# Altium schematic symbol library IntegratedCircuit.SchLib: 131 symbols (part 2 of 3)
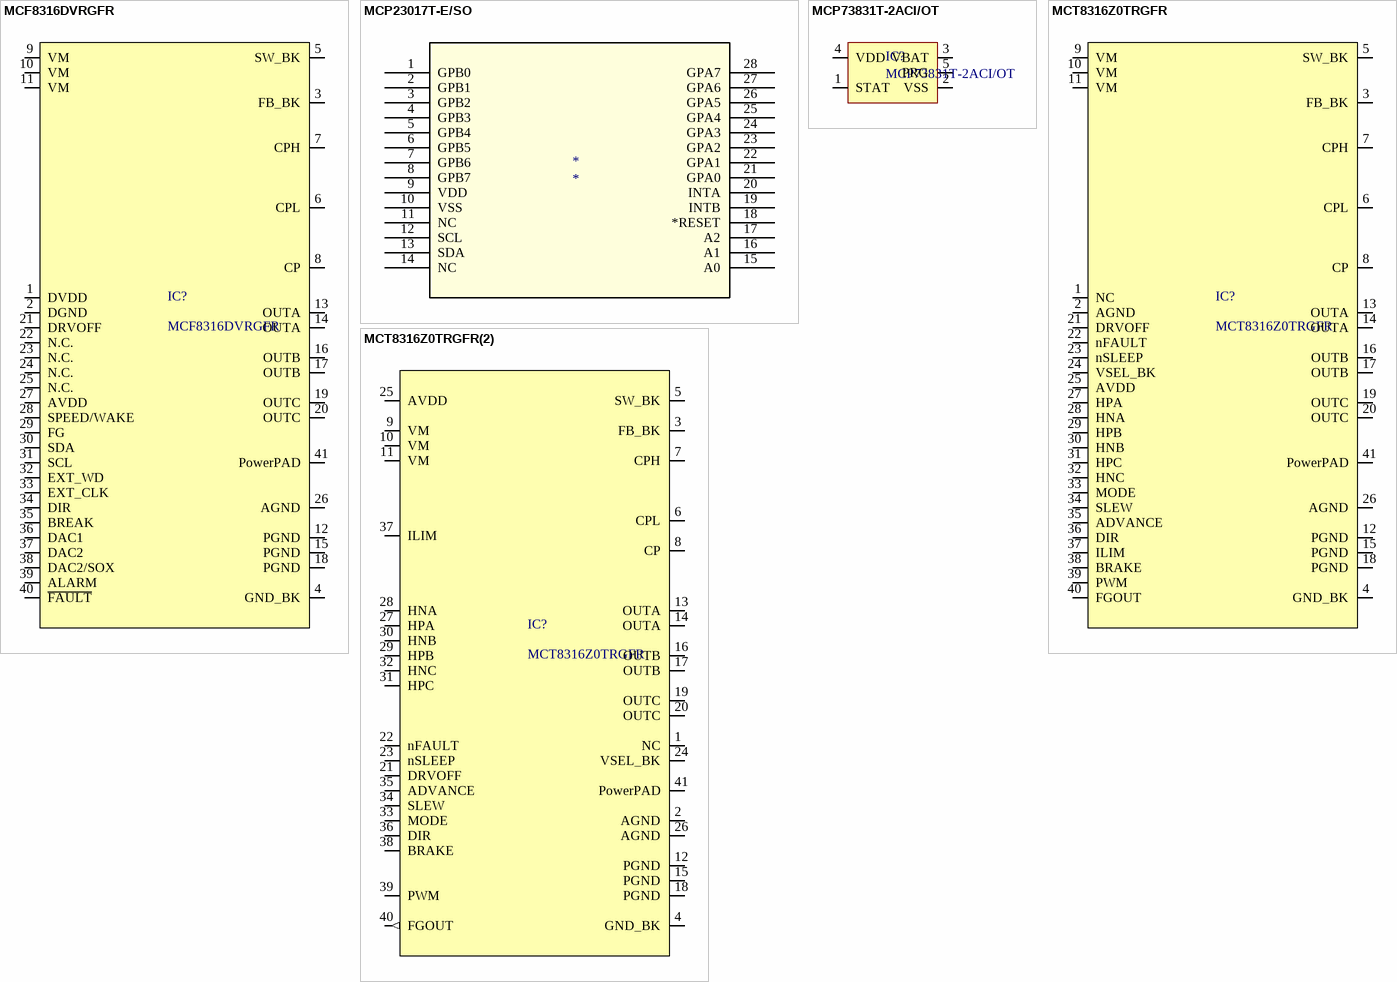
[diagram p12: symbols MCF8316DVRGFR to MCT8316Z0TRGFR(2)]

## MCT8316Z0TRGFR
designator IC?
IC BLDC MOTOR DRIVER Multiphase Motor Driver NMOS Hardware 40-VQFN (7x5); Manufacturer: Texas Instruments; Max Supply Voltage: 35V; Min Supply Voltage: 4.5V; Purpose Of Usage: BASIC; Topology: BRUSHLESS DC; Manufacturer Part Number: MCT8316Z0TRGFR; RoHS: YES; Category: INTEGRATED CIRCUITS; Case/Package: VFQFN-40; Max Operating Temperature: 125°C; Min Operating Temperature: -40°C; Mount: SMD; MSL: 2; Stock ID: ??; Sub-Category: MOTOR DRIVER; Supplier 1: Digi-Key; Supplier Part Number 1: 296-MCT8316Z0TRGFRTR-ND; Lead Free: Lead Free
footprint VQFN40_7X5_TEX
pins: 1 NC, 2 AGND (power), 3 FB_BK, 4 GND_BK (power), 5 SW_BK, 6 CPL, 7 CPH, 8 CP, 9 VM, 10 VM, 11 VM, 12 PGND (power), 13 OUTA, 14 OUTA, 15 PGND (power), 16 OUTB, 17 OUTB, 18 PGND (power), 19 OUTC, 20 OUTC, 21 DRVOFF, 22 nFAULT, 23 nSLEEP, 24 VSEL_BK, 25 AVDD (power), 26 AGND (power), 27 HPA, 28 HNA, 29 HPB, 30 HNB, 31 HPC, 32 HNC, 33 MODE, 34 SLEW, 35 ADVANCE, 36 DIR, 37 ILIM, 38 BRAKE, 39 PWM, 40 FGOUT, 41 PowerPAD

## MCT8316Z0TRGFR(2)
designator IC?, comment MCT8316Z0TRGFR
IC BLDC MOTOR DRIVER Multiphase Motor Driver NMOS Hardware 40-VQFN (7x5); Manufacturer: Texas Instruments; Max Supply Voltage: 35V; Min Supply Voltage: 4.5V; Purpose Of Usage: BASIC; Topology: BRUSHLESS DC; Manufacturer Part Number: MCT8316Z0TRGFR; RoHS: YES; Category: INTEGRATED CIRCUITS; Case/Package: VFQFN-40; Max Operating Temperature: 125°C; Min Operating Temperature: -40°C; Mount: SMD; MSL: 2; Stock ID: ??; Sub-Category: MOTOR DRIVER; Supplier 1: Digi-Key; Supplier Part Number 1: 296-MCT8316Z0TRGFRTR-ND; Lead Free: Lead Free
footprint VQFN40_7X5_TEX
pins: 1 NC, 2 AGND (power), 3 FB_BK, 4 GND_BK (power), 5 SW_BK, 6 CPL, 7 CPH, 8 CP, 9 VM, 10 VM, 11 VM, 12 PGND (power), 13 OUTA, 14 OUTA, 15 PGND (power), 16 OUTB, 17 OUTB, 18 PGND (power), 19 OUTC, 20 OUTC, 21 DRVOFF, 22 nFAULT, 23 nSLEEP, 24 VSEL_BK, 25 AVDD (power), 26 AGND (power), 27 HPA, 28 HNA, 29 HPB, 30 HNB, 31 HPC, 32 HNC, 33 MODE, 34 SLEW, 35 ADVANCE, 36 DIR, 37 ILIM, 38 BRAKE, 39 PWM, 40 FGOUT (out), 41 PowerPAD

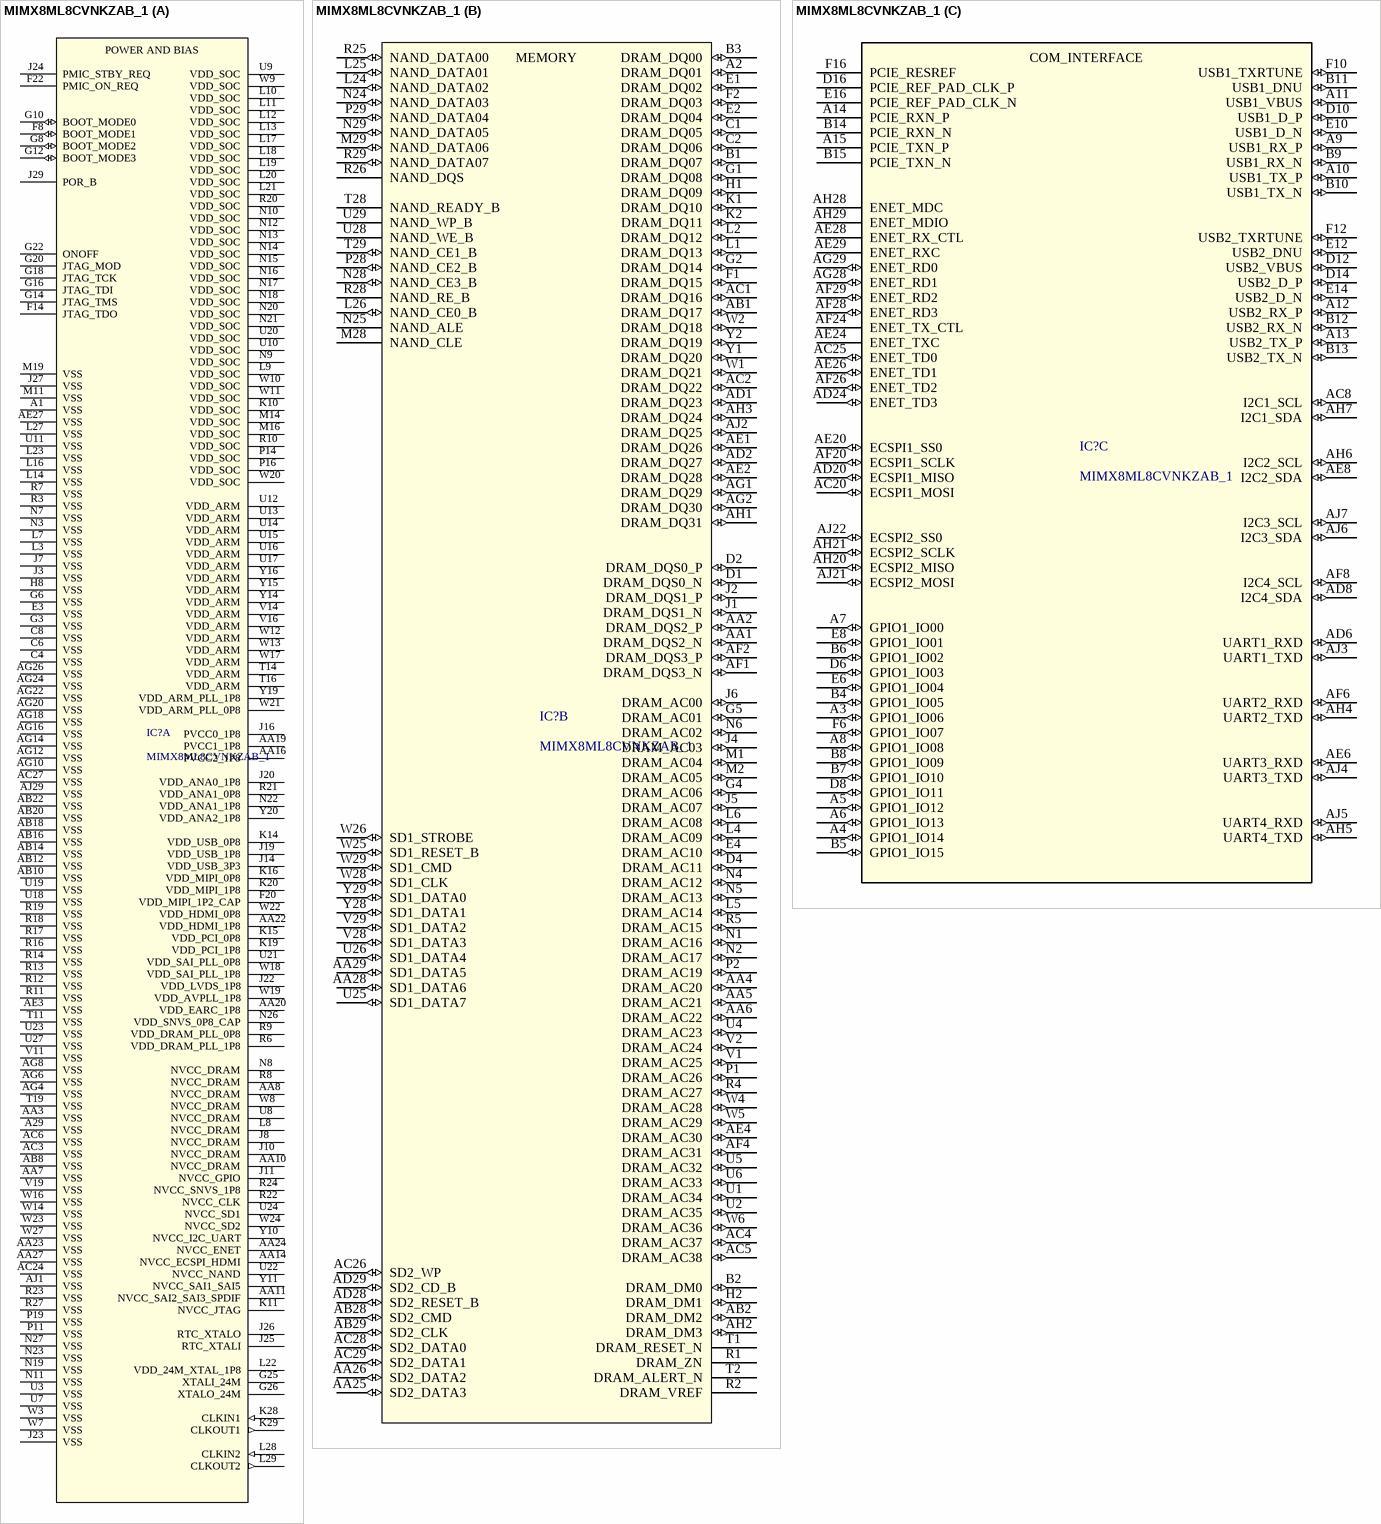
[diagram p5: symbol MIMX8ML8CVNKZAB_1]

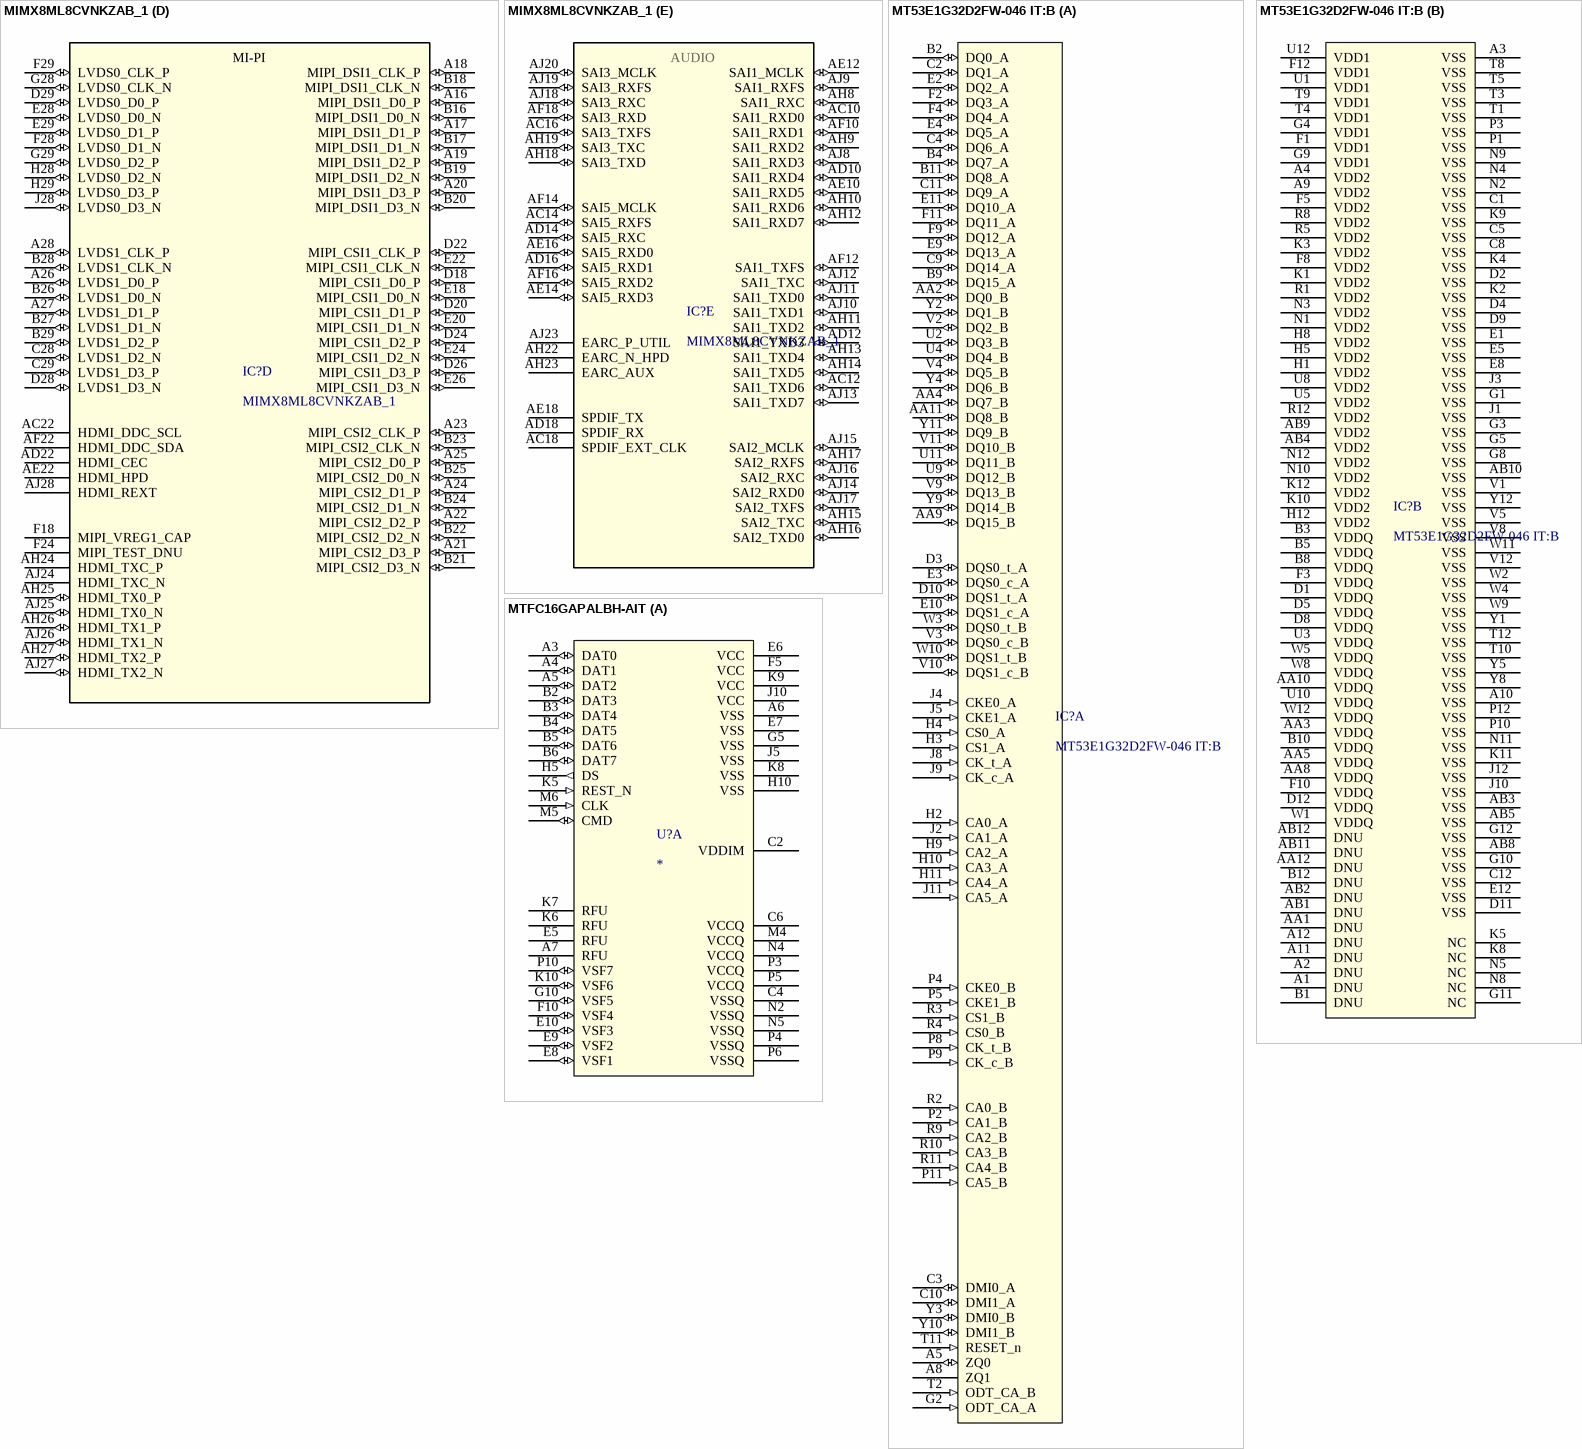
[diagram p6: symbols MIMX8ML8CVNKZAB_1 to MTFC16GAPALBH-AIT]

## MIMX8ML8CVNKZAB_1
designator IC?
i.MX 8M Plus, Industrial / TRAY TRAY MULTIPLE DP BAKEABLE RoHS Compliant: Yes; Manufacturer: NXP Semiconductors; Purpose Of Usage: BASIC; Manufacturer Part Number: MIMX8ML8CVNKZAB; RoHS: NO; Category: INTEGRATED CIRCUITS; Case/Package: LFBGA-548; Lead Free: Lead Free; Mount: SMD; Stock ID: ??; Sub-Category: MICROPROCESSOR; Supplier 1: Digikey; Supplier Part Number 1: 568-MIMX8ML8CVNKZAB-ND
footprint LFBGA548_SOT2047-1_NXP
part A pins: A1 VSS (power), A29 VSS (power), AA3 VSS (power), AA7 VSS (power), AA8 NVCC_DRAM (power), AA10 NVCC_DRAM (power), AA11 NVCC_SAI2_SAI3_SPDIF (power), AA14 NVCC_ECSPI_HDMI (power), AA16 PVCC2_1P8 (power), AA19 PVCC1_1P8 (power), AA20 VDD_EARC_1P8 (power), AA22 VDD_HDMI_1P8 (power), AA23 VSS (power), AA24 NVCC_ENET (power), AA27 VSS (power), AB8 VSS (power), AB10 VSS (power), AB12 VSS (power), AB14 VSS (power), AB16 VSS (power), AB18 VSS (power), AB20 VSS (power), AB22 VSS (power), AC3 VSS (power), AC6 VSS (power), AC24 VSS (power), AC27 VSS (power), AE3 VSS (power), AE27 VSS (power), AG4 VSS (power), AG6 VSS (power), AG8 VSS (power), AG10 VSS (power), AG12 VSS (power), AG14 VSS (power), AG16 VSS (power), AG18 VSS (power), AG20 VSS (power), AG22 VSS (power), AG24 VSS (power), AG26 VSS (power), AJ1 VSS (power), AJ29 VSS (power), C4 VSS (power), C6 VSS (power), C8 VSS (power), E3 VSS (power), F8 BOOT_MODE1 (io), F14 JTAG_TDO, F20 VDD_MIPI_1P2_CAP (power), F22 PMIC_ON_REQ, G3 VSS (power), G6 VSS (power), G8 BOOT_MODE2 (io), G10 BOOT_MODE0 (io), G12 BOOT_MODE3 (io), G14 JTAG_TMS, G16 JTAG_TDI, G18 JTAG_TCK, G20 JTAG_MOD, G22 ONOFF, G25 XTALI_24M, G26 XTALO_24M, H8 VSS (power), J3 VSS (power), J7 VSS (power), J8 NVCC_DRAM (power), J10 NVCC_DRAM (power), J11 NVCC_GPIO (power), J14 VDD_USB_3P3 (power), J16 PVCC0_1P8 (power), J19 VDD_USB_1P8 (power), J20 VDD_ANA0_1P8 (power), J22 VDD_LVDS_1P8 (power), J23 VSS (power), J24 PMIC_STBY_REQ, J25 RTC_XTALI, J26 RTC_XTALO, J27 VSS (power), J29 POR_B, K10 VDD_SOC (power), K11 NVCC_JTAG (power), K14 VDD_USB_0P8 (power), K15 VDD_PCI_0P8 (power), K16 VDD_MIPI_0P8 (power), K19 VDD_PCI_1P8 (power), K20 VDD_MIPI_1P8 (power), K28 CLKIN1 (in), K29 CLKOUT1 (out), L3 VSS (power), L7 VSS (power), L8 NVCC_DRAM (power), L9 VDD_SOC (power), L10 VDD_SOC (power), L11 VDD_SOC (power), L12 VDD_SOC (power), L13 VDD_SOC (power), L14 VSS (power), L16 VSS (power), L17 VDD_SOC (power), L18 VDD_SOC (power), L19 VDD_SOC (power), L20 VDD_SOC (power), L21 VDD_SOC (power), L22 VDD_24M_XTAL_1P8 (power), L23 VSS (power), L27 VSS (power), L28 CLKIN2 (in), L29 CLKOUT2 (out), M11 VSS (power), M14 VDD_SOC (power), M16 VDD_SOC (power), M19 VSS (power), N3 VSS (power), N7 VSS (power), N8 NVCC_DRAM (power), N9 VDD_SOC (power), N10 VDD_SOC (power), N11 VSS (power), N12 VDD_SOC (power), N13 VDD_SOC (power), N14 VDD_SOC (power), N15 VDD_SOC (power), N16 VDD_SOC (power), N17 VDD_SOC (power), N18 VDD_SOC (power), N19 VSS (power), N20 VDD_SOC (power), N21 VDD_SOC (power), N22 VDD_ANA1_1P8 (power), N23 VSS (power), N26 VDD_SNVS_0P8_CAP (power), N27 VSS (power), P11 VSS (power), P14 VDD_SOC (power), P16 VDD_SOC (power), P19 VSS (power), R3 VSS (power), R6 VDD_DRAM_PLL_1P8 (power), R7 VSS (power), R8 NVCC_DRAM (power), R9 VDD_DRAM_PLL_0P8 (power), R10 VDD_SOC (power), R11 VSS (power), R12 VSS (power), R13 VSS (power), R14 VSS (power), R16 VSS (power), R17 VSS (power), R18 VSS (power), R19 VSS (power), R20 VDD_SOC (power), R21 VDD_ANA1_0P8 (power), R22 NVCC_CLK (power), R23 VSS (power), R24 NVCC_SNVS_1P8 (power), R27 VSS (power), T11 VSS (power), T14 VDD_ARM (power), T16 VDD_ARM (power), T19 VSS (power), U3 VSS (power), U7 VSS (power), U8 NVCC_DRAM (power), U9 VDD_SOC (power), U10 VDD_SOC (power), U11 VSS (power), U12 VDD_ARM (power), U13 VDD_ARM (power), U14 VDD_ARM (power), U15 VDD_ARM (power), U16 VDD_ARM (power), U17 VDD_ARM (power), U18 VSS (power), U19 VSS (power), U20 VDD_SOC (power), U21 VDD_SAI_PLL_0P8 (power), U22 NVCC_NAND (power), U23 VSS (power), U24 NVCC_SD1 (power), U27 VSS (power), V11 VSS (power), V14 VDD_ARM (power), V16 VDD_ARM (power), V19 VSS (power), W3 VSS (power), W7 VSS (power), W8 NVCC_DRAM (power), W9 VDD_SOC (power), W10 VDD_SOC (power), W11 VDD_SOC (power), W12 VDD_ARM (power), W13 VDD_ARM (power), W14 VSS (power), W16 VSS (power), W17 VDD_ARM (power), W18 VDD_SAI_PLL_1P8 (power), W19 VDD_AVPLL_1P8 (power), W20 VDD_SOC (power), W21 VDD_ARM_PLL_0P8 (power), W22 VDD_HDMI_0P8 (power), W23 VSS (power), W24 NVCC_SD2 (power), W27 VSS (power), Y10 NVCC_I2C_UART (power), Y11 NVCC_SAI1_SAI5 (power), Y14 VDD_ARM (power), Y15 VDD_ARM (power), Y16 VDD_ARM (power), Y19 VDD_ARM_PLL_1P8 (power), Y20 VDD_ANA2_1P8 (power)
part B pins: A2 DRAM_DQ01 (io), AA1 DRAM_DQS2_N (io), AA2 DRAM_DQS2_P (io), AA4 DRAM_AC20 (io), AA5 DRAM_AC21 (io), AA6 DRAM_AC22 (io), AA25 SD2_DATA3 (io), AA26 SD2_DATA2 (io), AA28 SD1_DATA6 (io), AA29 SD1_DATA5 (io), AB1 DRAM_DQ17 (io), AB2 DRAM_DM2 (io), AB28 SD2_CMD (io), AB29 SD2_CLK (io), AC1 DRAM_DQ16 (io), AC2 DRAM_DQ22 (io), AC4 DRAM_AC37 (io), AC5 DRAM_AC38 (io), AC26 SD2_WP (io), AC28 SD2_DATA0 (io), AC29 SD2_DATA1 (io), AD1 DRAM_DQ23 (io), AD2 DRAM_DQ27 (io), AD28 SD2_RESET_B (io), AD29 SD2_CD_B (io), AE1 DRAM_DQ26 (io), AE2 DRAM_DQ28 (io), AE4 DRAM_AC30 (io), AF1 DRAM_DQS3_N (io), AF2 DRAM_DQS3_P (io), AF4 DRAM_AC31 (io), AG1 DRAM_DQ29 (io), AG2 DRAM_DQ30 (io), AH1 DRAM_DQ31 (io), AH2 DRAM_DM3 (io), AH3 DRAM_DQ24 (io), AJ2 DRAM_DQ25 (io), B1 DRAM_DQ07 (io), B2 DRAM_DM0 (io), B3 DRAM_DQ00 (io), C1 DRAM_DQ05 (io), C2 DRAM_DQ06 (io), D1 DRAM_DQS0_N (io), D2 DRAM_DQS0_P (io), D4 DRAM_AC11 (io), E1 DRAM_DQ02 (io), E2 DRAM_DQ04 (io), E4 DRAM_AC10 (io), F1 DRAM_DQ15 (io), F2 DRAM_DQ03 (io), G1 DRAM_DQ08 (io), G2 DRAM_DQ14 (io), G4 DRAM_AC06 (io), G5 DRAM_AC01 (io), H1 DRAM_DQ09 (io), H2 DRAM_DM1 (io), J1 DRAM_DQS1_N (io), J2 DRAM_DQS1_P (io), J4 DRAM_AC03 (io), J5 DRAM_AC07 (io), J6 DRAM_AC00 (io), K1 DRAM_DQ10 (io), K2 DRAM_DQ11 (io), L1 DRAM_DQ13 (io), L2 DRAM_DQ12 (io), L4 DRAM_AC09 (io), L5 DRAM_AC14 (io), L6 DRAM_AC08 (io), L24 NAND_DATA02 (io), L25 NAND_DATA01 (io), L26 NAND_CE0_B (io), M1 DRAM_AC04 (io), M2 DRAM_AC05 (io), M28 NAND_CLE, M29 NAND_DATA06 (io), N1 DRAM_AC16 (io), N2 DRAM_AC17 (io), N4 DRAM_AC12 (io), N5 DRAM_AC13 (io), N6 DRAM_AC02 (io), N24 NAND_DATA03 (io), N25 NAND_ALE, N28 NAND_CE3_B (io), N29 NAND_DATA05 (io), P1 DRAM_AC26 (io), P2 DRAM_AC19 (io), P28 NAND_CE2_B (io), P29 NAND_DATA04 (io), R1 DRAM_ZN, R2 DRAM_VREF (power), R4 DRAM_AC27 (io), R5 DRAM_AC15 (io), R25 NAND_DATA00 (io), R26 NAND_DQS, R28 NAND_RE_B, R29 NAND_DATA07 (io), T1 DRAM_RESET_N, T2 DRAM_ALERT_N, T28 NAND_READY_B, T29 NAND_CE1_B (io), U1 DRAM_AC34 (io), U2 DRAM_AC35 (io), U4 DRAM_AC23 (io), U5 DRAM_AC32 (io), U6 DRAM_AC33 (io), U25 SD1_DATA7 (io), U26 SD1_DATA4 (io), U28 NAND_WE_B, U29 NAND_WP_B, V1 DRAM_AC25 (io), V2 DRAM_AC24 (io), V28 SD1_DATA3 (io), V29 SD1_DATA2 (io), W1 DRAM_DQ21 (io), W2 DRAM_DQ18 (io), W4 DRAM_AC28 (io), W5 DRAM_AC29 (io), W6 DRAM_AC36 (io), W25 SD1_RESET_B (io), W26 SD1_STROBE (io), W28 SD1_CLK (io), W29 SD1_CMD (io), Y1 DRAM_DQ20 (io), Y2 DRAM_DQ19 (io), Y28 SD1_DATA1 (io), Y29 SD1_DATA0 (io)
part C pins: A3 GPIO1_IO06 (io), A4 GPIO1_IO14 (io), A5 GPIO1_IO12 (io), A6 GPIO1_IO13 (io), A7 GPIO1_IO00 (io), A8 GPIO1_IO08 (io), A9 USB1_RX_P (io), A10 USB1_TX_P (io), A11 USB1_VBUS (io), A12 USB2_RX_P (io), A13 USB2_TX_P (io), A14 PCIE_RXN_P, A15 PCIE_TXN_P, AC8 I2C1_SCL (io), AC20 ECSPI1_MOSI (io), AC25 ENET_TD0 (io), AD6 UART1_RXD (io), AD8 I2C4_SDA (io), AD20 ECSPI1_MISO (io), AD24 ENET_TD3 (io), AE6 UART3_RXD (io), AE8 I2C2_SDA (io), AE20 ECSPI1_SS0 (io), AE24 ENET_TXC, AE26 ENET_TD1 (io), AE28 ENET_RX_CTL, AE29 ENET_RXC, AF6 UART2_RXD (io), AF8 I2C4_SCL (io), AF20 ECSPI1_SCLK (io), AF24 ENET_TX_CTL, AF26 ENET_TD2 (io), AF28 ENET_RD3 (io), AF29 ENET_RD2 (io), AG28 ENET_RD1 (io), AG29 ENET_RD0 (io), AH4 UART2_TXD (io), AH5 UART4_TXD (io), AH6 I2C2_SCL (io), AH7 I2C1_SDA (io), AH20 ECSPI2_MISO (io), AH21 ECSPI2_SCLK (io), AH28 ENET_MDC, AH29 ENET_MDIO, AJ3 UART1_TXD (io), AJ4 UART3_TXD (io), AJ5 UART4_RXD (io), AJ6 I2C3_SDA (io), AJ7 I2C3_SCL (io), AJ21 ECSPI2_MOSI (io), AJ22 ECSPI2_SS0 (io), B4 GPIO1_IO05 (io), B5 GPIO1_IO15 (io), B6 GPIO1_IO02 (io), B7 GPIO1_IO10 (io), B8 GPIO1_IO09 (io), B9 USB1_RX_N (io), B10 USB1_TX_N (io), B11 USB1_DNU (io), B12 USB2_RX_N (io), B13 USB2_TX_N (io), B14 PCIE_RXN_N, B15 PCIE_TXN_N, D6 GPIO1_IO03 (io), D8 GPIO1_IO11 (io), D10 USB1_D_P (io), D12 USB2_VBUS (io), D14 USB2_D_P (io), D16 PCIE_REF_PAD_CLK_P, E6 GPIO1_IO04 (io), E8 GPIO1_IO01 (io), E10 USB1_D_N (io), E12 USB2_DNU (io), E14 USB2_D_N (io), E16 PCIE_REF_PAD_CLK_N, F6 GPIO1_IO07 (io), F10 USB1_TXRTUNE (io), F12 USB2_TXRTUNE (io), F16 PCIE_RESREF
part D pins: A16 MIPI_DSI1_D0_P (io), A17 MIPI_DSI1_D1_P (io), A18 MIPI_DSI1_CLK_P (io), A19 MIPI_DSI1_D2_P (io), A20 MIPI_DSI1_D3_P (io), A21 MIPI_CSI2_D3_P (io), A22 MIPI_CSI2_D2_P (io), A23 MIPI_CSI2_CLK_P (io), A24 MIPI_CSI2_D1_P (io), A25 MIPI_CSI2_D0_P (io), A26 LVDS1_D0_P (io), A27 LVDS1_D1_P (io), A28 LVDS1_CLK_P (io), AC22 HDMI_DDC_SCL, AD22 HDMI_CEC, AE22 HDMI_HPD, AF22 HDMI_DDC_SDA, AH24 HDMI_TXC_P, AH25 HDMI_TX0_P (io), AH26 HDMI_TX1_P (io), AH27 HDMI_TX2_P (io), AJ24 HDMI_TXC_N, AJ25 HDMI_TX0_N (io), AJ26 HDMI_TX1_N (io), AJ27 HDMI_TX2_N (io), AJ28 HDMI_REXT, B16 MIPI_DSI1_D0_N (io), B17 MIPI_DSI1_D1_N (io), B18 MIPI_DSI1_CLK_N (io), B19 MIPI_DSI1_D2_N (io), B20 MIPI_DSI1_D3_N (io), B21 MIPI_CSI2_D3_N (io), B22 MIPI_CSI2_D2_N (io), B23 MIPI_CSI2_CLK_N (io), B24 MIPI_CSI2_D1_N (io), B25 MIPI_CSI2_D0_N (io), B26 LVDS1_D0_N (io), B27 LVDS1_D1_N (io), B28 LVDS1_CLK_N (io), B29 LVDS1_D2_P (io), C28 LVDS1_D2_N (io), C29 LVDS1_D3_P (io), D18 MIPI_CSI1_D0_P (io), D20 MIPI_CSI1_D1_P (io), D22 MIPI_CSI1_CLK_P (io), D24 MIPI_CSI1_D2_P (io), D26 MIPI_CSI1_D3_P (io), D28 LVDS1_D3_N (io), D29 LVDS0_D0_P (io), E18 MIPI_CSI1_D0_N (io), E20 MIPI_CSI1_D1_N (io), E22 MIPI_CSI1_CLK_N (io), E24 MIPI_CSI1_D2_N (io), E26 MIPI_CSI1_D3_N (io), E28 LVDS0_D0_N (io), E29 LVDS0_D1_P (io), F18 MIPI_VREG1_CAP, F24 MIPI_TEST_DNU, F28 LVDS0_D1_N (io), F29 LVDS0_CLK_P (io), G28 LVDS0_CLK_N (io), G29 LVDS0_D2_P (io), H28 LVDS0_D2_N (io), H29 LVDS0_D3_P (io), J28 LVDS0_D3_N (io)
part E pins: AC10 SAI1_RXD0 (io), AC12 SAI1_TXD6 (io), AC14 SAI5_RXFS (io), AC16 SAI3_TXFS (io), AC18 SPDIF_EXT_CLK, AD10 SAI1_RXD4 (io), AD12 SAI1_TXD3 (io), AD14 SAI5_RXC (io), AD16 SAI5_RXD1 (io), AD18 SPDIF_RX, AE10 SAI1_RXD5 (io), AE12 SAI1_MCLK (io), AE14 SAI5_RXD3 (io), AE16 SAI5_RXD0 (io), AE18 SPDIF_TX, AF10 SAI1_RXD1 (io), AF12 SAI1_TXFS (io), AF14 SAI5_MCLK (io), AF16 SAI5_RXD2 (io), AF18 SAI3_RXD (io), AH8 SAI1_RXC (io), AH9 SAI1_RXD2 (io), AH10 SAI1_RXD6 (io), AH11 SAI1_TXD2 (io), AH12 SAI1_RXD7 (io), AH13 SAI1_TXD4 (io), AH14 SAI1_TXD5 (io), AH15 SAI2_TXC (io), AH16 SAI2_TXD0 (io), AH17 SAI2_RXFS (io), AH18 SAI3_TXD (io), AH19 SAI3_TXC (io), AH22 EARC_N_HPD, AH23 EARC_AUX, AJ8 SAI1_RXD3 (io), AJ9 SAI1_RXFS (io), AJ10 SAI1_TXD1 (io), AJ11 SAI1_TXD0 (io), AJ12 SAI1_TXC (io), AJ13 SAI1_TXD7 (io), AJ14 SAI2_RXD0 (io), AJ15 SAI2_MCLK (io), AJ16 SAI2_RXC (io), AJ17 SAI2_TXFS (io), AJ18 SAI3_RXC (io), AJ19 SAI3_RXFS (io), AJ20 SAI3_MCLK (io), AJ23 EARC_P_UTIL
part A text: POWER AND BIAS
part B text: MEMORY
part C text: COM_INTERFACE
part D text: MI-PI
part E text: AUDIO

## MT53E1G32D2FW-046 IT:B
designator IC?
DRAM Chip Mobile LPDDR4 SDRAM 32Gbit 1Gx32 1.1V/1.8V 200-Pin TFBGA T/R/Tray; Manufacturer: Micron Technology; Manufacturer Part Number: MT53E1G32D2FW-046WT:B; Purpose Of Usage: BASIC; RoHS: NO; Category: INTEGRATED CIRCUITS; Case/Package: TFBGA-200; Lead Free: Lead Free; Mount: SMD; Stock ID: ??; Sub-Category: RAM-LPDDR4; Supplier 1: Digikey; Supplier Part Number 1: 557-MT53E1G32D2FW-046WT:B-ND
footprint VFBGA200_10X14.5X1.1FW_MRN
part A pins: A5 ZQ0 (io), A8 ZQ1 (power), AA2 DQ0_B (io), AA4 DQ7_B (io), AA9 DQ15_B (io), AA11 DQ8_B (io), B2 DQ0_A (io), B4 DQ7_A (io), B9 DQ15_A (io), B11 DQ8_A (io), C2 DQ1_A (io), C3 DMI0_A (io), C4 DQ6_A (io), C9 DQ14_A (io), C10 DMI1_A (io), C11 DQ9_A (io), D3 DQS0_t_A (io), D10 DQS1_t_A (io), E2 DQ2_A (io), E3 DQS0_c_A (io), E4 DQ5_A (io), E9 DQ13_A (io), E10 DQS1_c_A (io), E11 DQ10_A (io), F2 DQ3_A (io), F4 DQ4_A (io), F9 DQ12_A (io), F11 DQ11_A (io), G2 ODT_CA_A (in), H2 CA0_A (in), H3 CS1_A (in), H4 CS0_A (in), H9 CA2_A (in), H10 CA3_A (in), H11 CA4_A (in), J2 CA1_A (in), J4 CKE0_A (in), J5 CKE1_A (in), J8 CK_t_A (in), J9 CK_c_A (in), J11 CA5_A (in), P2 CA1_B (in), P4 CKE0_B (in), P5 CKE1_B (in), P8 CK_t_B (in), P9 CK_c_B (in), P11 CA5_B (in), R2 CA0_B (in), R3 CS1_B (in), R4 CS0_B (in), R9 CA2_B (in), R10 CA3_B (in), R11 CA4_B (in), T2 ODT_CA_B (in), T11 RESET_n (in), U2 DQ3_B (io), U4 DQ4_B (io), U9 DQ12_B (io), U11 DQ11_B (io), V2 DQ2_B (io), V3 DQS0_c_B (io), V4 DQ5_B (io), V9 DQ13_B (io), V10 DQS1_c_B (io), V11 DQ10_B (io), W3 DQS0_t_B (io), W10 DQS1_t_B (io), Y2 DQ1_B (io), Y3 DMI0_B (io), Y4 DQ6_B (io), Y9 DQ14_B (io), Y10 DMI1_B (io), Y11 DQ9_B (io)
part B pins: A1 DNU, A2 DNU, A3 VSS (power), A4 VDD2 (power), A9 VDD2 (power), A10 VSS (power), A11 DNU, A12 DNU, AA1 DNU, AA3 VDDQ (power), AA5 VDDQ (power), AA8 VDDQ (power), AA10 VDDQ (power), AA12 DNU, AB1 DNU, AB2 DNU, AB3 VSS (power), AB4 VDD2 (power), AB5 VSS (power), AB8 VSS (power), AB9 VDD2 (power), AB10 VSS (power), AB11 DNU, AB12 DNU, B1 DNU, B3 VDDQ (power), B5 VDDQ (power), B8 VDDQ (power), B10 VDDQ (power), B12 DNU, C1 VSS (power), C5 VSS (power), C8 VSS (power), C12 VSS (power), D1 VDDQ (power), D2 VSS (power), D4 VSS (power), D5 VDDQ (power), D8 VDDQ (power), D9 VSS (power), D11 VSS (power), D12 VDDQ (power), E1 VSS (power), E5 VSS (power), E8 VSS (power), E12 VSS (power), F1 VDD1 (power), F3 VDDQ (power), F5 VDD2 (power), F8 VDD2 (power), F10 VDDQ (power), F12 VDD1 (power), G1 VSS (power), G3 VSS (power), G4 VDD1 (power), G5 VSS (power), G8 VSS (power), G9 VDD1 (power), G10 VSS (power), G11 NC, G12 VSS (power), H1 VDD2 (power), H5 VDD2 (power), H8 VDD2 (power), H12 VDD2 (power), J1 VSS (power), J3 VSS (power), J10 VSS (power), J12 VSS (power), K1 VDD2 (power), K2 VSS (power), K3 VDD2 (power), K4 VSS (power), K5 NC, K8 NC, K9 VSS (power), K10 VDD2 (power), K11 VSS (power), K12 VDD2 (power), N1 VDD2 (power), N2 VSS (power), N3 VDD2 (power), N4 VSS (power), N5 NC, N8 NC, N9 VSS (power), N10 VDD2 (power), N11 VSS (power), N12 VDD2 (power), P1 VSS (power), P3 VSS (power), P10 VSS (power), P12 VSS (power), R1 VDD2 (power), R5 VDD2 (power), R8 VDD2 (power), R12 VDD2 (power), T1 VSS (power), T3 VSS (power), T4 VDD1 (power), T5 VSS (power), T8 VSS (power), T9 VDD1 (power), T10 VSS (power), T12 VSS (power), U1 VDD1 (power), U3 VDDQ (power), U5 VDD2 (power), U8 VDD2 (power), U10 VDDQ (power), U12 VDD1 (power), V1 VSS (power), V5 VSS (power), V8 VSS (power), V12 VSS (power), W1 VDDQ (power), W2 VSS (power), W4 VSS (power), W5 VDDQ (power), W8 VDDQ (power), W9 VSS (power), W11 VSS (power), W12 VDDQ (power), Y1 VSS (power), Y5 VSS (power), Y8 VSS (power), Y12 VSS (power)

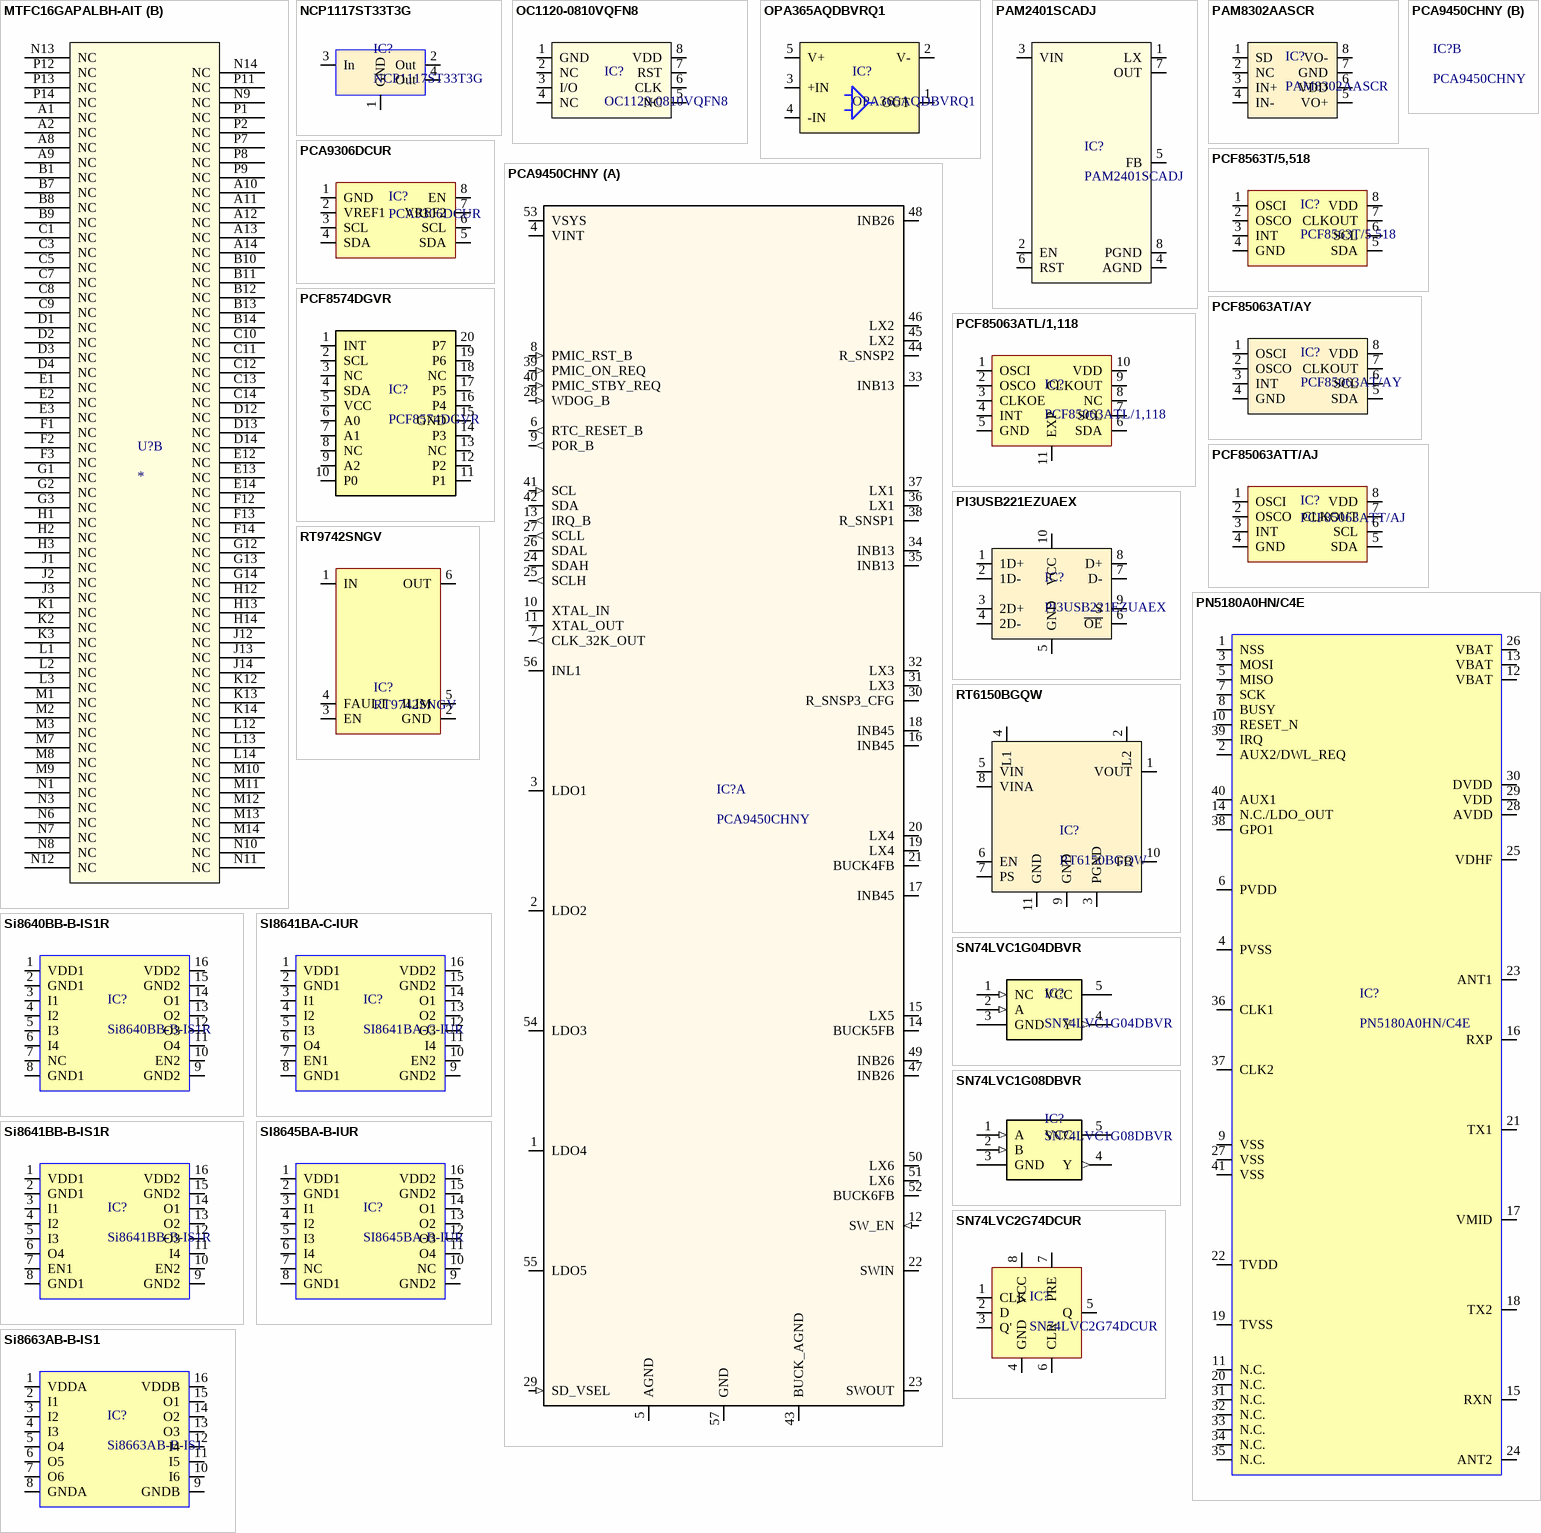
[diagram p7: symbols MTFC16GAPALBH-AIT to SN74LVC2G74DCUR]

## MTFC16GAPALBH-AIT
designator U?
No Description Available; Manufacturer: Microchip; Manufacturer Part Number: MTFC16GAPALBH-AITA; Purpose Of Usage: BASIC; Case/Package: TFBGA-200; Category: INTEGRATED CIRCUITS; Lead Free: Lead Free; Max Operating Temperature: 85°C; Min Operating Temperature: -40°C; Mount: SMD; Stock ID: ??; Sub-Category: MEMORY- RAM; Supplier 1: Digikey; Supplier Part Number 1: MTFC16GAPALBH-AIT-ND
footprint TFBGA153_BH_MRN
part A pins: A3 DAT0 (io), A4 DAT1 (io), A5 DAT2 (io), A6 VSS (power), A7 RFU, B2 DAT3 (io), B3 DAT4 (io), B4 DAT5 (io), B5 DAT6 (io), B6 DAT7 (io), C2 VDDIM (power), C4 VSSQ (power), C6 VCCQ (power), E5 RFU, E6 VCC (power), E7 VSS (power), E8 VSF1 (io), E9 VSF2 (io), E10 VSF3 (io), F5 VCC (power), F10 VSF4 (io), G5 VSS (power), G10 VSF5 (io), H5 DS (out), H10 VSS (power), J5 VSS (power), J10 VCC (power), K5 REST_N (in), K6 RFU, K7 RFU, K8 VSS (power), K9 VCC (power), K10 VSF6 (io), M4 VCCQ (power), M5 CMD (io), M6 CLK (in), N2 VSSQ (power), N4 VCCQ (power), N5 VSSQ (power), P3 VCCQ (power), P4 VSSQ (power), P5 VCCQ (power), P6 VSSQ (power), P10 VSF7 (io)
part B pins: A1 NC, A2 NC, A8 NC, A9 NC, A10 NC, A11 NC, A12 NC, A13 NC, A14 NC, B1 NC, B7 NC, B8 NC, B9 NC, B10 NC, B11 NC, B12 NC, B13 NC, B14 NC, C1 NC, C3 NC, C5 NC, C7 NC, C8 NC, C9 NC, C10 NC, C11 NC, C12 NC, C13 NC, C14 NC, D1 NC, D2 NC, D3 NC, D4 NC, D12 NC, D13 NC, D14 NC, E1 NC, E2 NC, E3 NC, E12 NC, E13 NC, E14 NC, F1 NC, F2 NC, F3 NC, F12 NC, F13 NC, F14 NC, G1 NC, G2 NC, G3 NC, G12 NC, G13 NC, G14 NC, H1 NC, H2 NC, H3 NC, H12 NC, H13 NC, H14 NC, J1 NC, J2 NC, J3 NC, J12 NC, J13 NC, J14 NC, K1 NC, K2 NC, K3 NC, K12 NC, K13 NC, K14 NC, L1 NC, L2 NC, L3 NC, L12 NC, L13 NC, L14 NC, M1 NC, M2 NC, M3 NC, M7 NC, M8 NC, M9 NC, M10 NC, M11 NC, M12 NC, M13 NC, M14 NC, N1 NC, N3 NC, N6 NC, N7 NC, N8 NC, N9 NC, N10 NC, N11 NC, N12 NC, N13 NC, N14 NC, P1 NC, P2 NC, P7 NC, P8 NC, P9 NC, P11 NC, P12 NC, P13 NC, P14 NC

## NCP1117ST33T3G
designator IC?
IC REG LDO 3.3V 1A SOT223; Manufacturer: ON Semiconductor; Purpose Of Usage: BASIC; Supplier 1: Digi-Key; Manufacturer Part Number: NCP1117ST33T3G; RoHS: YES; Category: INTEGRATED CIRCUITS; Mount: SMD; Case/Package: SOT-223; Package Quantity: 1; Lead Free: Lead Free; Supplier Part Number 1: NCP1117ST33T3GOSCT-ND; Sub-Category: PMIC - LINEAR REGULATOR; Stock ID: ??; Topology: LDO
footprint SOT223-3 (SOT223, 4-Leads, Body 6.50x7.00mm (avg), Pitch 2.30mm, IPC Medium Density)
pins: 1 GND, 2 Out, 3 In, 4 Out

## OC1120-0810VQFN8
designator IC?
eSIM; Manufacturer: Infineon; Purpose Of Usage: BASIC; Manufacturer Part Number: OC1120-0810VQFN8; RoHS: NO; Supplier Part Number 1: OC1120-0810VQFN8; Case/Package: PG-VQFN-8-4; Category: INTEGRATED CIRCUITS; Lead Free: Lead Free; Mount: SMD; Stock ID: ??; Sub-Category: eSIM; Supplier 1: Future
footprint PG-VQFN-8-4 (SOIC, 8-Leads, Body 4.90x3.90mm, Pitch 1.27mm, IPC Medium Density)
pins: 1 GND, 2 NC, 3 I/O, 4 NC, 5 NC, 6 CLK, 7 RST, 8 VDD

## OPA365AQDBVRQ1
designator IC?
Op Amp Single Low Offset Voltage Amplifier R-R I/O 5.5V Automotive 5-Pin SOT-23 T/R; Manufacturer: Texas Instruments; Min Supply Voltage: 2.2V; Purpose Of Usage: BASIC; Manufacturer Part Number: OPA365AQDBVRQ1; RoHS: YES; Category: INTEGRATED CIRCUITS; Case/Package: TFBGA-200; Lead Free: Lead Free; Max Operating Temperature: 125°C; Max Supply Voltage: 5.5V; Min Operating Temperature: -40°C; Mount: SMD; MSL: 1; Price 10K: 2.88; Stock ID: ??; Sub-Category: OPAMPS; Supplier 1: Digi-Key; Supplier Part Number 1: 296-27404-2-ND
footprint SOT23-5 (SOT23, 6-Leads, Body 2.73x2.80mm, Pitch 0.95mm, IPC Medium Density)
pins: 1 OUT, 2 V-, 3 +IN, 4 -IN, 5 V+

## PAM2401SCADJ
designator IC?
IC REG BOOST ADJ 3A SYNC 8MSOP; Manufacturer: Diodes; Purpose Of Usage: BASIC; Manufacturer Part Number: PAM2401SCADJ; RoHS: YES; Category: INTEGRATED CIRCUITS; Case/Package: MSOP; Lead Free: Lead Free; Local Supplier: OZDISAN; Mount: SMD; Price 10K: 0.75; Stock ID: ??; Sub-Category: PMIC - DC/DC Switching Regulator; Supplier 1: Digi-Key; Supplier Part Number 1: PAM2401SCADJDICT-ND; Topology: BOOST
footprint MSOP-08 (TSOP, 8-Leads, Body 2.95x2.95mm, Pitch 0.65mm, IPC Medium Density)
pins: 1 LX, 2 EN, 3 VIN, 4 AGND, 5 FB, 6 RST, 7 OUT, 8 PGND

## PAM8302AASCR
designator IC?
IC AMP AUDIO 2.5W CLASS D 8MSOP; Manufacturer: Diodes; Purpose Of Usage: BASIC; Supplier 1: Digi-Key; Manufacturer Part Number: PAM8302AASCR; RoHS: YES; Sub-Category: AMPLIFIER-AUDIO; Stock 1: 126713; Case/Package: MSOP; Package Quantity: 2500; Lead Free: Lead Free; Supplier Part Number 1: PAM8302AASCRDICT-ND; Category: INTEGRATED CIRCUITS; Mount: SMD; Stock ID: ??; Local Supplier: FUTURE; Price 10K: 0.17
footprint MSOP-08 (TSOP, 8-Leads, Body 2.95x2.95mm, Pitch 0.65mm, IPC Medium Density)
pins: 1 SD, 2 NC, 3 IN+, 4 IN-, 5 VO+ (power), 6 VDD (power), 7 GND (power), 8 VO- (power)

## PCA9306DCUR
designator IC?
TEXAS INSTRUMENTS - PCA9306DCUR - 2 BIT VOLTAGE LEVEL TRANSLATOR VSSOP8; Purpose Of Usage: BASIC; Supplier 1: Digi-Key; Supplier Part Number 1: 296-17988-1-ND; Manufacturer: Texas Instruments; Manufacturer Part Number: PCA9306DCUR; Stock 1: 19235; RoHS: YES; Case/Package: VSSOP; Package Quantity: 1; Lead Free: Lead Free; Category: INTEGRATED CIRCUITS; Sub-Category: LEVEL SHIFTER; Mount: SMD; Stock ID: ??
footprint SOP50P310X90-8N
pins: 1 GND, 2 VREF1, 3 SCL, 4 SDA, 5 SDA, 6 SCL, 7 VREF2, 8 EN

## PCA9450CHNY
designator IC?
SAMPLE FPN ONLY - Power Management Specialized - PMIC PMIC for i.MX8M Plus(865S); Manufacturer: NXP Semiconductors; Purpose Of Usage: BASIC; Manufacturer Part Number: PCA9450CHNY; RoHS: YES; Category: INTEGRATED CIRCUITS; Case/Package: HVQFN; Lead Free: Lead Free; Max Operating Temperature: 105°C; Min Operating Temperature: -40°C; Mount: SMD; Stock 1: 18433; Stock ID: ??; Sub-Category: PMIC - DC/DC Switching Regulator; Supplier 1: Digikey; Supplier Part Number 1: 568-PCA9450CHNYDKR-ND
footprint HVQFN56_SOT949-6_NXP
part A pins: 1 LDO4 (power), 2 LDO2 (power), 3 LDO1 (power), 4 VINT (power), 5 AGND (power), 6 RTC_RESET_B (out), 7 CLK_32K_OUT (out), 8 PMIC_RST_B (in), 9 POR_B (out), 10 XTAL_IN, 11 XTAL_OUT, 12 SW_EN (in), 13 IRQ_B (out), 14 BUCK5FB, 15 LX5 (power), 16 INB45 (power), 17 INB45 (power), 18 INB45 (power), 19 LX4 (power), 20 LX4 (power), 21 BUCK4FB, 22 SWIN (power), 23 SWOUT (power), 24 SDAH (io), 25 SCLH (out), 26 SDAL (io), 27 SCLL (out), 28 WDOG_B (in), 29 SD_VSEL (in), 30 R_SNSP3_CFG, 31 LX3 (power), 32 LX3 (power), 33 INB13 (power), 34 INB13 (power), 35 INB13 (power), 36 LX1 (power), 37 LX1 (power), 38 R_SNSP1, 39 PMIC_ON_REQ (in), 40 PMIC_STBY_REQ (in), 41 SCL (in), 42 SDA (io), 43 BUCK_AGND (power), 44 R_SNSP2, 45 LX2 (power), 46 LX2 (power), 47 INB26 (power), 48 INB26 (power), 49 INB26 (power), 50 LX6 (power), 51 LX6 (power), 52 BUCK6FB, 53 VSYS (power), 54 LDO3 (power), 55 LDO5 (power), 56 INL1 (power), 57 GND (power)

## PCF8563T/5,518
designator IC?
Real Time Clock Serial 8-Pin SO T/R; Manufacturer: NXP Semiconductors; Purpose Of Usage: BASIC; Supplier 1: Digi-Key; Manufacturer Part Number: PCF8563T/5,518; Stock 1: 3911; RoHS: YES; Mount: SMD; Case/Package: SOIC; Package Quantity: 2500; Lead Free: Lead Free; Category: INTEGRATED CIRCUITS; Supplier Part Number 1: 568-6650-1-ND; Sub-Category: REAL TIME CLOCK; Stock ID: ??
footprint SOIC127P600X175-8N (SOIC, 8-Leads, Body 4.90x3.90mm, Pitch 1.27mm, IPC Medium Density)
pins: 1 OSCI, 2 OSCO, 3 INT, 4 GND, 5 SDA, 6 SCL, 7 CLKOUT, 8 VDD

## PCF8574DGVR
designator IC?
8-bit 2.5- to 5.5-V I2C/SMBus I/O expander with interrupt 20-TVSOP -40 to 85; Manufacturer: Texas Instruments; Purpose Of Usage: BASIC; Supplier 1: Digi-Key; Manufacturer Part Number: PCF8574DGVR; Stock 1: 34; Mount: SMD; Case/Package: TFSOP; Package Quantity: 1; Lead Free: Lead Free; Supplier Part Number 1: 296-17364-1-ND; Category: INTEGRATED CIRCUITS; Sub-Category: PORT EXPANDER; RoHS: YES; Stock ID: ??
footprint DGV20
pins: 1 INT, 2 SCL, 3 NC, 4 SDA, 5 VCC, 6 A0, 7 A1, 8 NC, 9 A2, 10 P0, 11 P1, 12 P2, 13 NC, 14 P3, 15 GND, 16 P4, 17 P5, 18 NC, 19 P6, 20 P7

## PCF85063AT/AY
designator IC?
IC RTC CLK/CALENDAR I2C 8SO; Manufacturer: NXP Semiconductors; Purpose Of Usage: BASIC; Manufacturer Part Number: PCF85063AT/AY; RoHS: YES; Category: INTEGRATED CIRCUITS; Case/Package: SOIC; Min Operating Temperature: -40°C; Max Operating Temperature: 85°C; Lead Free: Lead Free; Mount: SMD; Stock ID: ??; Sub-Category: REAL TIME CLOCK; Supplier 1: Digi-Key; Supplier Part Number 1: 568-12403-1-ND
footprint SOIC127P600X175-8N (SOIC, 8-Leads, Body 4.90x3.90mm, Pitch 1.27mm, IPC Medium Density)
pins: 1 OSCI, 2 OSCO, 3 INT, 4 GND, 5 SDA, 6 SCL, 7 CLKOUT, 8 VDD

## PCF85063ATL/1,118
designator IC?
PCF85063ATL/1,118  REAL TIME CLOCK/CALENDAR, BINARY, HXSON; Manufacturer: NXP Semiconductors; Purpose Of Usage: BASIC; Supplier 1: Digi-Key; Manufacturer Part Number: PCF85063ATL/1,118; Stock 1: 43945; RoHS: YES; Mount: SMD; Case/Package: DFN EP; Package Quantity: 4000; Lead Free: Lead Free; Supplier Part Number 1: 568-10235-1-ND; Category: INTEGRATED CIRCUITS; Sub-Category: REAL TIME CLOCK; Stock ID: ??
footprint DFN2626-10
pins: 1 OSCI, 2 OSCO, 3 CLKOE, 4 INT, 5 GND, 6 SDA, 7 SCL, 8 NC, 9 CLKOUT, 10 VDD, 11 EXP

## PCF85063ATT/AJ
designator IC?
Real time clock, TSSOP-8,; Manufacturer: NXP Semiconductors; Purpose Of Usage: BASIC; Supplier 1: Digi-Key; Supplier Part Number 1: 568-12404-1-ND; Manufacturer Part Number: PCF85063ATT/AJ; Stock 1: 34322; RoHS: YES; Mount: SMD; Case/Package: TSSOP; Lead Free: Lead Free; Category: INTEGRATED CIRCUITS; Sub-Category: REAL TIME CLOCK; Stock ID: ??
footprint SOT505-1
pins: 1 OSCI, 2 OSCO, 3 INT, 4 GND, 5 SDA, 6 SCL, 7 CLKOUT, 8 VDD

## PI3USB221EZUAEX
designator IC?
Analog Multiplexer Single 1: 2 10-Pin UQFN T/R; Manufacturer: Diodes Inc.; Purpose Of Usage: BASIC; Supplier 1: Digi-Key; Manufacturer Part Number: PI3USB221EZUAEX; Category: INTEGRATED CIRCUITS; Supplier Part Number 1: PI3USB221EZUAEXDITR-ND; Case/Package: UDFN2015-10; Lead Free: Lead Free; Mount: SMD; RoHS: YES; Stock ID: ??; Sub-Category: USB SWITCH
footprint UQFN2015-10 (SON, 6-Leads, Body 1.98x1.98mm, Pitch 0.65mm, Thermal Pad 1.60x0.91mm, IPC Medium Density)
pins: 1 1D+, 2 1D-, 3 2D+, 4 2D-, 5 GND, 6 ~{OE}, 7 D-, 8 D+, 9 S, 10 VCC

## PN5180A0HN/C4E
designator IC?
NFC Read/Write 13.56 MHz 2.7V to 5.5V 40-Pin HVQFN Tray; Manufacturer: NXP Semiconductors; Purpose Of Usage: BASIC; Supplier 1: Digi-Key; Manufacturer Part Number: PN5180A0HN/C4E; RoHS: YES; Supplier Part Number 1: 568-PN5180A0HN/C4E-ND; Category: INTEGRATED CIRCUITS; Sub-Category: NFC Driver; Case/Package: QFN; Lead Free: Lead Free; Mount: SMD; Stock ID: ??; Local Supplier: AVNET; Price 10K: 2.7
footprint HVQFN40 SOT618-1 (QFN, 40-Leads, Body 6.00x6.00mm, Pitch 0.50mm, Thermal Pad 4.10x4.10mm, IPC Medium Density)
pins: 1 NSS, 2 AUX2/DWL_REQ, 3 MOSI, 4 PVSS, 5 MISO, 6 PVDD, 7 SCK, 8 BUSY, 9 VSS, 10 RESET_N, 11 N.C., 12 VBAT, 13 VBAT, 14 N.C./LDO_OUT, 15 RXN, 16 RXP, 17 VMID, 18 TX2, 19 TVSS, 20 N.C., 21 TX1, 22 TVDD, 23 ANT1, 24 ANT2, 25 VDHF, 26 VBAT, 27 VSS, 28 AVDD, 29 VDD, 30 DVDD, 31 N.C., 32 N.C., 33 N.C., 34 N.C., 35 N.C., 36 CLK1, 37 CLK2, 38 GPO1, 39 IRQ, 40 AUX1, 41 VSS

## RT6150BGQW
designator IC?
RT6150B Series 1.8 V 800 mA 1 Out ADJ Buck-Boost Switching Reg-10-WDFN; Manufacturer: Richtek; Purpose Of Usage: BASIC; Supplier 1: Digi-Key; Manufacturer Part Number: RT6150BGQW; RoHS: YES; Category: INTEGRATED CIRCUITS; Stock 1: 6000; Topology: Buck-Boost; Lead Free: Lead Free; Supplier Part Number 1: 1028-1260-2-ND; Case/Package: WSON-10; Local Supplier: FUTURE; Mount: SMD; Package Quantity: 10; Price 10K: 0.35; Stock ID: ??; Sub-Category: PMIC - DC/DC Switching Regulator
footprint WSON-10
pins: 1 VOUT, 2 L2, 3 PGND, 4 L1, 5 VIN, 6 EN, 7 PS, 8 VINA, 9 GND, 10 FB, 11 GND

## RT9742SNGV
designator IC?
Power Switch/Driver 1:1 N-Channel 500mA SOT-23-3; Manufacturer: Diodes; Manufacturer Part Number: AP22653W6-7; Purpose Of Usage: BASIC; Supplier 1: Digi-Key; Stock 1: 12659; RoHS: NO; Supplier Part Number 1: RT9742SNGVCT-ND; Category: INTEGRATED CIRCUITS; Sub-Category: POWER SWITCH; Mount: SMD; Case/Package: SOT-23-6; Lead Free: Lead Free; Stock ID: ??
footprint SOT23-6
pins: 1 IN, 2 GND, 3 EN, 4 FAULT, 5 ILIM, 6 OUT

## Si8640BB-B-IS1R
designator IC?
Digital Isolators Quad Ch 1.0kV Isltr 150M 4/0 NB SOIC16; Manufacturer: Silicon Labs; Purpose Of Usage: BASIC; Supplier 1: Digi-Key; Manufacturer Part Number: Si8640BB-B-IS1R; Stock 1: 0; RoHS: YES; Case/Package: SOIC; Package Quantity: 2500; Supplier Part Number 1: 336-5211-1-ND; Category: INTEGRATED CIRCUITS; Mount: SMD; Sub-Category: ISOLATOR; Lead Free: Lead Free; Stock ID: ??
footprint SO16
pins: 1 VDD1, 2 GND1, 3 I1, 4 I2, 5 I3, 6 I4, 7 NC, 8 GND1, 9 GND2, 10 EN2, 11 O4, 12 O3, 13 O2, 14 O1, 15 GND2, 16 VDD2

## SI8641BA-C-IUR
designator IC?
General Purpose tal Isolator 1000Vrms 4 Channel 150Mbps 35kV/µs CMTI 16-SSOP (0.154 , 3.90mm Width); Manufacturer: Silicon Labs; Purpose Of Usage: BASIC; Supplier 1: Digi-Key; Manufacturer Part Number: SI8641BA-C-IUR; Stock 1: 611; RoHS: YES; Case/Package: SSOP; Supplier Part Number 1: 336-4939-1-ND; Category: INTEGRATED CIRCUITS; Mount: SMD; Sub-Category: ISOLATOR; Lead Free: Lead Free; Stock ID: ??
footprint QSOP16
pins: 1 VDD1, 2 GND1, 3 I1, 4 I2, 5 I3, 6 O4, 7 EN1, 8 GND1, 9 GND2, 10 EN2, 11 I4, 12 O3, 13 O2, 14 O1, 15 GND2, 16 VDD2

## Si8641BB-B-IS1R
designator IC?
Low Power Quad Channel Digital Isolator 16-Pin SOIC N T/R; Manufacturer: Silicon Labs; Purpose Of Usage: BASIC; Supplier 1: Digi-Key; Manufacturer Part Number: Si8641BB-B-IS1R; Stock 1: 2155; RoHS: YES; Case/Package: SOIC; Package Quantity: 2500; Supplier Part Number 1: 336-4356-1-ND; Category: INTEGRATED CIRCUITS; Mount: SMD; Sub-Category: ISOLATOR; Lead Free: Lead Free; Stock ID: ??
footprint SO16
pins: 1 VDD1, 2 GND1, 3 I1, 4 I2, 5 I3, 6 O4, 7 EN1, 8 GND1, 9 GND2, 10 EN2, 11 I4, 12 O3, 13 O2, 14 O1, 15 GND2, 16 VDD2

## SI8645BA-B-IUR
designator IC?
Digital Isolator CMOS 4-CH 150Mbps Automotive 16-Pin QSOP T/R; Manufacturer: Silicon Labs; Purpose Of Usage: BASIC; Supplier 1: Digi-Key; Manufacturer Part Number: SI8645BA-B-IUR; Stock 1: 4650; RoHS: YES; Case/Package: QSOP; Package Quantity: 2500; Supplier Part Number 1: SI8645BA-B-IURCT-ND; Category: INTEGRATED CIRCUITS; Mount: SMD; Sub-Category: ISOLATOR; Lead Free: Lead Free; Stock ID: ??
footprint QSOP16
pins: 1 VDD1, 2 GND1, 3 I1, 4 I2, 5 I3, 6 I4, 7 NC, 8 GND1, 9 GND2, 10 NC, 11 O4, 12 O3, 13 O2, 14 O1, 15 GND2, 16 VDD2

## Si8663AB-B-IS1
designator IC?
Digital Isolator CMOS 6-CH 1Mbps Automotive 16-Pin SOIC N Tube; Manufacturer: Silicon Labs; Purpose Of Usage: BASIC; Supplier 1: Digi-Key; Supplier Part Number 1: 336-4714-ND; Manufacturer Part Number: Si8663AB-B-IS1; Stock 1: 49; RoHS: YES; Mount: SMD; Case/Package: SOIC; Package Quantity: 48; Category: INTEGRATED CIRCUITS; Sub-Category: ISOLATOR; Lead Free: Lead Free; Stock ID: ??
footprint SO16
pins: 1 VDDA, 2 I1, 3 I2, 4 I3, 5 O4, 6 O5, 7 O6, 8 GNDA, 9 GNDB, 10 I6, 11 I5, 12 I4, 13 O3, 14 O2, 15 O1, 16 VDDB

## SN74LVC1G04DBVR
designator IC?
Inverter 1-Element CMOS 5-Pin SOT-23 T/R; Manufacturer: Texas Instruments; Purpose Of Usage: BASIC; Supplier 1: Digi-Key; Manufacturer Part Number: SN74LVC1G04DBVR; Stock 1: 132873; RoHS: YES; Mount: SMD; Case/Package: SOT-23; Package Quantity: 1; Lead Free: Lead Free; Category: INTEGRATED CIRCUITS; Supplier Part Number 1: 296-11599-1-ND; Sub-Category: LOGIC; Stock ID: ??
footprint SOT-23-5
pins: 1 NC (in), 2 A (in), 3 GND (power), 4 Y (out), 5 VCC (power)

## SN74LVC1G08DBVR
designator IC?
IC, AND GATE, SINGLE 2-INPUT, SMD; Manufacturer: Texas Instruments; Purpose Of Usage: BASIC; Supplier 1: Digi-Key; Manufacturer Part Number: SN74LVC1G08DBVR; Stock 1: 97419; RoHS: YES; Mount: SMD; Case/Package: SOT-23; Package Quantity: 1; Lead Free: Lead Free; Category: INTEGRATED CIRCUITS; Supplier Part Number 1: 296-11601-1-ND; Sub-Category: LOGIC; Stock ID: ??
footprint DBV0005A_L
pins: 1 A (in), 2 B (in), 3 GND (power), 4 Y (out), 5 VCC (power)

## SN74LVC2G74DCUR
designator IC?
TEXAS INSTRUMENTS - SN74LVC2G74DCUR - Flipflop, 74LVC74, D, 4.1 ns, 200 MHz, 32 mA, VSSOP; Purpose Of Usage: BASIC; Supplier 1: Digi-Key; Manufacturer: Texas Instruments; Manufacturer Part Number: SN74LVC2G74DCUR; Stock 1: 17670; RoHS: YES; Mount: SMD; Case/Package: VSSOP; Package Quantity: 3000; Lead Free: Lead Free; Supplier Part Number 1: 296-12755-1-ND; Category: INTEGRATED CIRCUITS; Sub-Category: LOGIC; Stock ID: ??
footprint VSSOP8
pins: 1 CLK, 2 D, 3 Q', 4 GND, 5 Q, 6 CLR, 7 PRE, 8 VCC

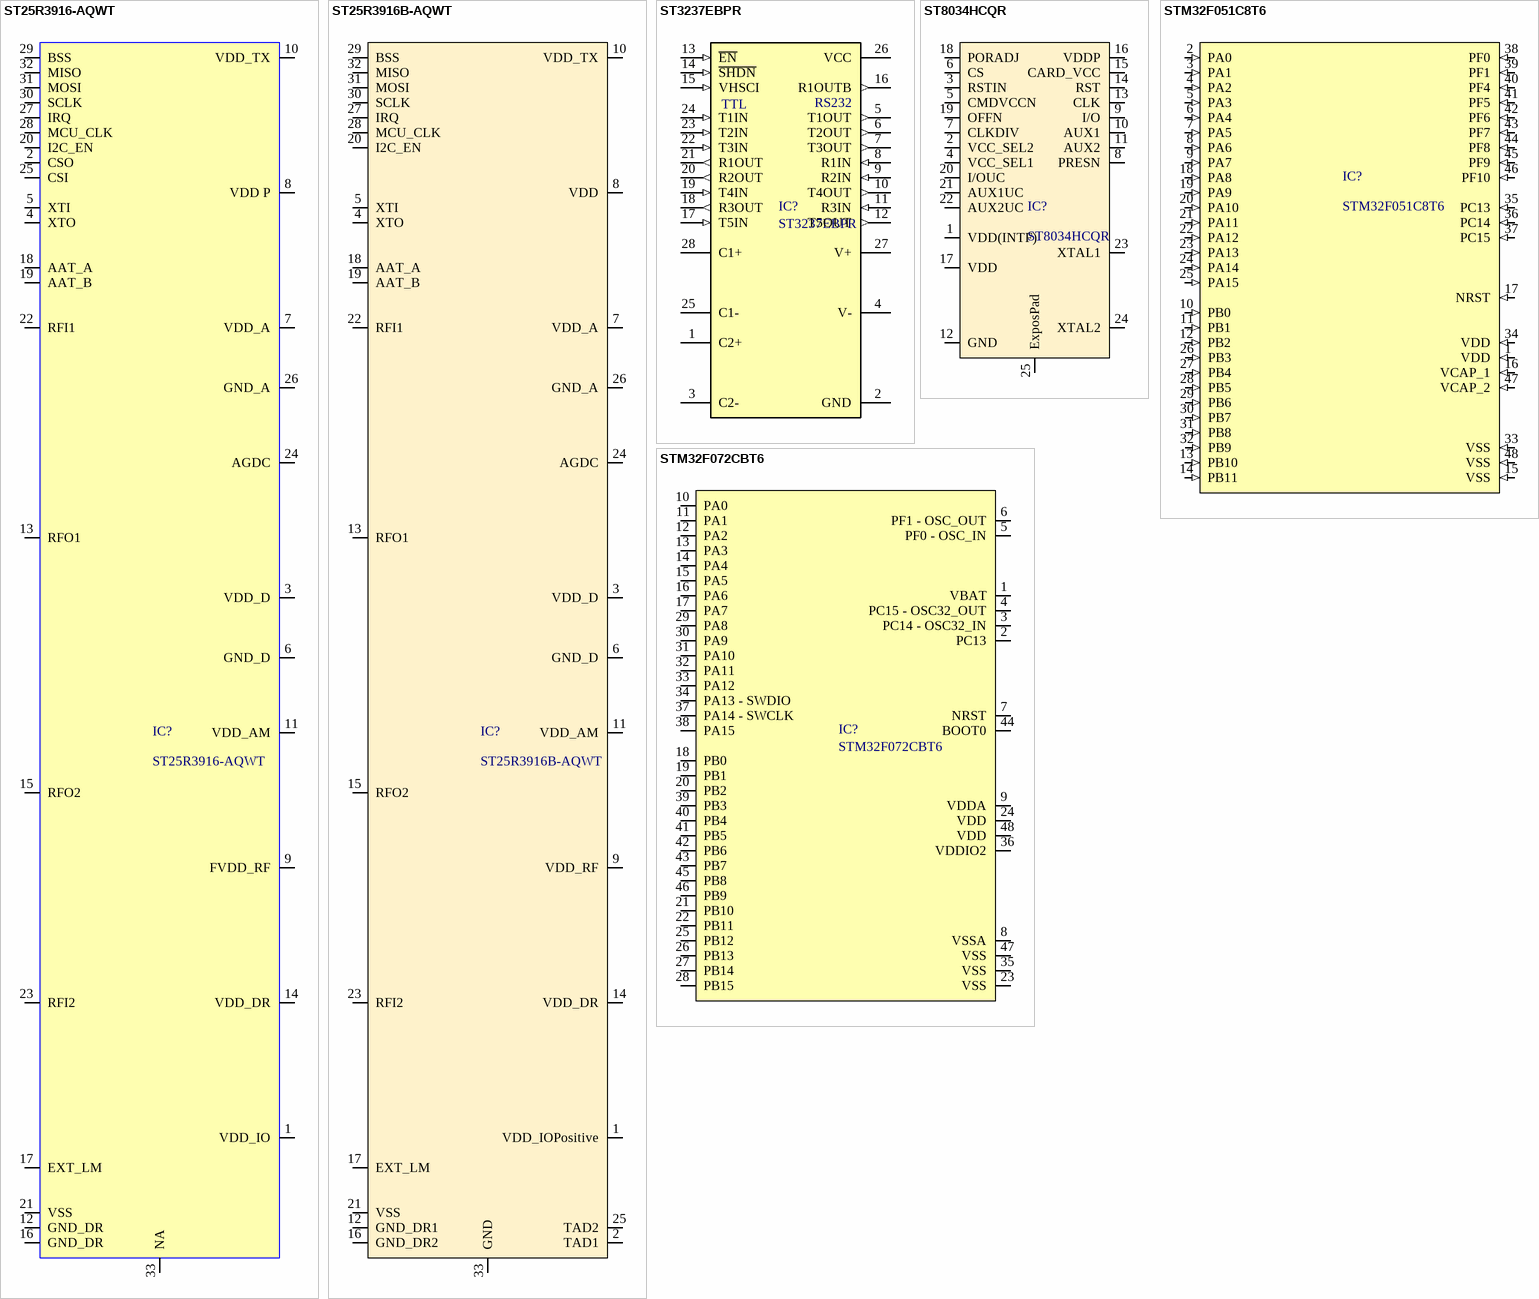
[diagram p8: symbols ST25R3916-AQWT to STM32F072CBT6]

## ST25R3916-AQWT
designator IC?
High performance NFC universal device and EMVCo reader, VFQFPN 5X5X1 32L WETTABLE FLANKS, RoHS; Manufacturer: STMicroelectronics; Purpose Of Usage: BASIC; Supplier 1: Digi-Key; Manufacturer Part Number: ST25R3916-AQWT; RoHS: YES; Category: INTEGRATED CIRCUITS; Supplier Part Number 1: 497-18366-1-ND; Sub-Category: NFC Driver; Mount: SMD; Case/Package: QFN; Lead Free: Lead Free; Stock ID: ??; Local Supplier: FUTURE; Price 10K: 2.88
footprint VFQFPN32 (PQFN, 32-Leads, Body 5.00x5.00mm, Pitch 0.50mm, Thermal Pad 3.50x3.50mm, IPC Medium Density)
pins: 1 VDD_IO "Positive supply for peripheral communication", 2 CSO "Capacitor sensor output / Test output 2", 3 VDD_D "Digital supply regulator output", 4 XTO "X’tal oscillator output", 5 XTI "X’tal oscillator input, in test mode used as digital input (clock)", 6 GND_D "Digital ground", 7 VDD_A "Analog supply regulator output", 8 VDD P "External positive supply", 9 FVDD_RF "Regulated driver supply for antenna drivers", 10 VDD_TX "External positive supply for the TX part", 11 VDD_AM "Regulated driver supply for AM modulation", 12 GND_DR "Antenna driver ground, including driver VSS", 13 RFO1 "Antenna driver output", 14 VDD_DR "Antenna driver positive supply input", 15 RFO2 "Antenna driver output", 16 GND_DR "Antenna driver ground, including driver VSS", 17 EXT_LM "External load modulation MOS gate driver", 18 AAT_A "AAT tune voltage for variable capacitor AAT_A", 19 AAT_B "AAT tune voltage for variable capacitor AAT_B", 20 I2C_EN "I2C interface enable (VDD_D level)", 21 VSS "Ground, die substrate potential", 22 RFI1 "Receiver input", 23 RFI2 "Receiver input", 24 AGDC "Analog reference voltage", 25 CSI "Capacitor sensor input / Test output 1", 26 GND_A "Analog ground", 27 IRQ "Interrupt request output", 28 MCU_CLK "Clock output for MCU", 29 BSS "SPI enable (active low)", 30 SCLK "SPI clock / I2C clock", 31 MOSI "SPI data input", 32 MISO "Serial peripheral interface data output / I2C data line", 33 NA "Thermal pad"

## ST25R3916B-AQWT
designator IC?
High Performance NFC Reader 13.553MHz to 13.567MHz 2mA 32-Pin VFQFPN T/R; Manufacturer: STMicroelectronics; Purpose Of Usage: BASIC; Supplier 1: Digi-Key; Manufacturer Part Number: ST25R3916B-AQWT; RoHS: NO; Category: INTEGRATED CIRCUITS; Supplier Part Number 1: 497-ST25R3916B-AQWTTR-ND; Case/Package: QFN; Lead Free: Lead Free; Local Supplier: FUTURE; Mount: SMD; Price 10K: 2.88; Stock ID: ??; Sub-Category: NFC Driver
footprint VFQFPN32 (PQFN, 32-Leads, Body 5.00x5.00mm, Pitch 0.50mm, Thermal Pad 3.50x3.50mm, IPC Medium Density)
pins: 1 VDD_IOPositive "SPI enable (active low)", 2 TAD1 "Serial peripheral interface data output / I2C data line", 3 VDD_D "SPI data input", 4 XTO "X’tal oscillator output", 5 XTI "X’tal oscillator input, in test mode used as digital input (clock)", 6 GND_D "Clock output for MCU", 7 VDD_A "I2C interface enable (VDD_D level)", 8 VDD "Capacitor sensor output / Test output 2", 9 VDD_RF "Capacitor sensor input / Test output 1", 10 VDD_TX "X’tal oscillator input, in test mode used as digital input (clock)", 11 VDD_AM "X’tal oscillator output", 12 GND_DR1 "AAT tune voltage for variable capacitor AAT_A", 13 RFO1 "Antenna driver output", 14 VDD_DR "Receiver input", 15 RFO2 "Antenna driver output", 16 GND_DR2 "Antenna driver output", 17 EXT_LM "External load modulation MOS gate driver", 18 AAT_A "AAT tune voltage for variable capacitor AAT_A", 19 AAT_B "AAT tune voltage for variable capacitor AAT_B", 20 I2C_EN "I2C interface enable (VDD_D level)", 21 VSS "Ground, die substrate potential", 22 RFI1 "Receiver input", 23 RFI2 "Receiver input", 24 AGDC "Antenna driver positive supply input", 25 TAD2 "Regulated driver supply for antenna drivers", 26 GND_A "Regulated driver supply for AM modulation", 27 IRQ "Interrupt request output", 28 MCU_CLK "Clock output for MCU", 29 BSS "SPI enable (active low)", 30 SCLK "SPI clock / I2C clock", 31 MOSI "SPI data input", 32 MISO "Serial peripheral interface data output / I2C data line", 33 GND "External positive supply for the TX part"

## ST3237EBPR
designator IC?
Quint Transmitter Triple Receiver RS-232 28-Pin SSOP T/R; Manufacturer: STMicroelectronics; Purpose Of Usage: BASIC; Supplier 1: Digi-Key; Supplier Part Number 1: 497-7927-1-ND; Manufacturer Part Number: ST3237EBPR; Stock 1: 3927; RoHS: YES; Mount: SMD; Case/Package: SSOP; Package Quantity: 1350; Lead Free: Lead Free; Category: INTEGRATED CIRCUITS; Sub-Category: RS232 to TTL; Stock ID: ??
footprint SSOP-28
pins: 1 C2+, 2 GND (power), 3 C2-, 4 V-, 5 T1OUT (out), 6 T2OUT (out), 7 T3OUT (out), 8 R1IN (in), 9 R2IN (in), 10 T4OUT (out), 11 R3IN (in), 12 T5OUT (out), 13 ~{EN} (in), 14 ~{SHDN} (in), 15 VHSCI (in), 16 R1OUTB (out), 17 T5IN (in), 18 R3OUT (out), 19 T4IN (in), 20 R2OUT (out), 21 R1OUT (out), 22 T3IN (in), 23 T2IN (in), 24 T1IN (in), 25 C1-, 26 VCC (power), 27 V+, 28 C1+
text: TTL; RS232

## ST8034HCQR
designator IC?
24-pin smartcard interfaces, -25°C to 85°C, HVQFN24 4x4x0-85, RoHS; Manufacturer: STMicroelectronics; Purpose Of Usage: BASIC; Supplier 1: Digi-Key; Manufacturer Part Number: ST8034HCQR; RoHS: YES; Category: INTEGRATED CIRCUITS; Case/Package: QFN; Package Quantity: 6000; Supplier Part Number 1: ST8034HCQR-ND; Lead Free: Lead Free; Local Supplier: FUTURE; Mount: SMD; Price 10K: 0.35; Stock ID: ??; Sub-Category: SMART CARD DRIVER
footprint QFN24
pins: 1 VDD(INTF), 2 VCC_SEL2, 3 RSTIN, 4 VCC_SEL1, 5 CMDVCCN, 6 CS, 7 CLKDIV, 8 PRESN, 9 I/O, 10 AUX1, 11 AUX2, 12 GND, 13 CLK, 14 RST, 15 CARD_VCC, 16 VDDP, 17 VDD, 18 PORADJ, 19 OFFN, 20 I/OUC, 21 AUX1UC, 22 AUX2UC, 23 XTAL1, 24 XTAL2, 25 ExposPad

## STM32F051C8T6
designator IC?
ARM Cortex M0 microcontroller, 32 bit, 48 MHz, LQFP-48, STM32F051C8T6; Manufacturer: STMicroelectronics; Purpose Of Usage: BASIC; Manufacturer Part Number: STM32F051C8T6; RoHS: YES; Category: INTEGRATED CIRCUITS; Lead Free: 5697LeadFree; Case/Package: LQFP; Mount: SMD; Stock ID: ??; Sub-Category: MCU; Supplier 1: Digi-Key; Supplier Part Number 1: 497-12893-ND
footprint LQFP48-7x7mm
pins: 1 VDD (in), 2 PA0 (in), 3 PA1 (in), 4 PA2 (in), 5 PA3 (in), 6 PA4 (in), 7 PA5 (in), 8 PA6 (in), 9 PA7 (in), 10 PB0 (in), 11 PB1 (in), 12 PB2 (in), 13 PB10 (in), 14 PB11 (in), 15 VSS (in), 16 VCAP_1 (in), 17 NRST (in), 18 PA8 (in), 19 PA9 (in), 20 PA10 (in), 21 PA11 (in), 22 PA12 (in), 23 PA13 (in), 24 PA14 (in), 25 PA15 (in), 26 PB3 (in), 27 PB4 (in), 28 PB5 (in), 29 PB6 (in), 30 PB7 (in), 31 PB8 (in), 32 PB9 (in), 33 VSS (in), 34 VDD (in), 35 PC13 (in), 36 PC14 (in), 37 PC15 (in), 38 PF0 (in), 39 PF1 (in), 40 PF4 (in), 41 PF5 (in), 42 PF6 (in), 43 PF7 (in), 44 PF8 (in), 45 PF9 (in), 46 PF10 (in), 47 VCAP_2 (in), 48 VSS (in)

## STM32F072CBT6
designator IC?
IC MCU 32BIT 128KB FLASH 48LQFP; Manufacturer: STMicroelectronics; Purpose Of Usage: BASIC; Supplier 1: Digi-Key; Manufacturer Part Number: STM32F072CBT6; Stock 1: 16666; RoHS: YES; Mount: SMD; Case/Package: LQFP; Lead Free: Lead Free; Supplier Part Number 1: 497-14645-ND; Category: INTEGRATED CIRCUITS; Sub-Category: MCU; Stock ID: ??
footprint LQFP48-7x7mm
pins: 1 VBAT, 2 PC13, 3 PC14 - OSC32_IN, 4 PC15 - OSC32_OUT, 5 PF0 - OSC_IN, 6 PF1 - OSC_OUT, 7 NRST, 8 VSSA, 9 VDDA, 10 PA0, 11 PA1, 12 PA2, 13 PA3, 14 PA4, 15 PA5, 16 PA6, 17 PA7, 18 PB0, 19 PB1, 20 PB2, 21 PB10, 22 PB11, 23 VSS, 24 VDD, 25 PB12, 26 PB13, 27 PB14, 28 PB15, 29 PA8, 30 PA9, 31 PA10, 32 PA11, 33 PA12, 34 PA13 - SWDIO, 35 VSS, 36 VDDIO2, 37 PA14 - SWCLK, 38 PA15, 39 PB3, 40 PB4, 41 PB5, 42 PB6, 43 PB7, 44 BOOT0, 45 PB8, 46 PB9, 47 VSS, 48 VDD

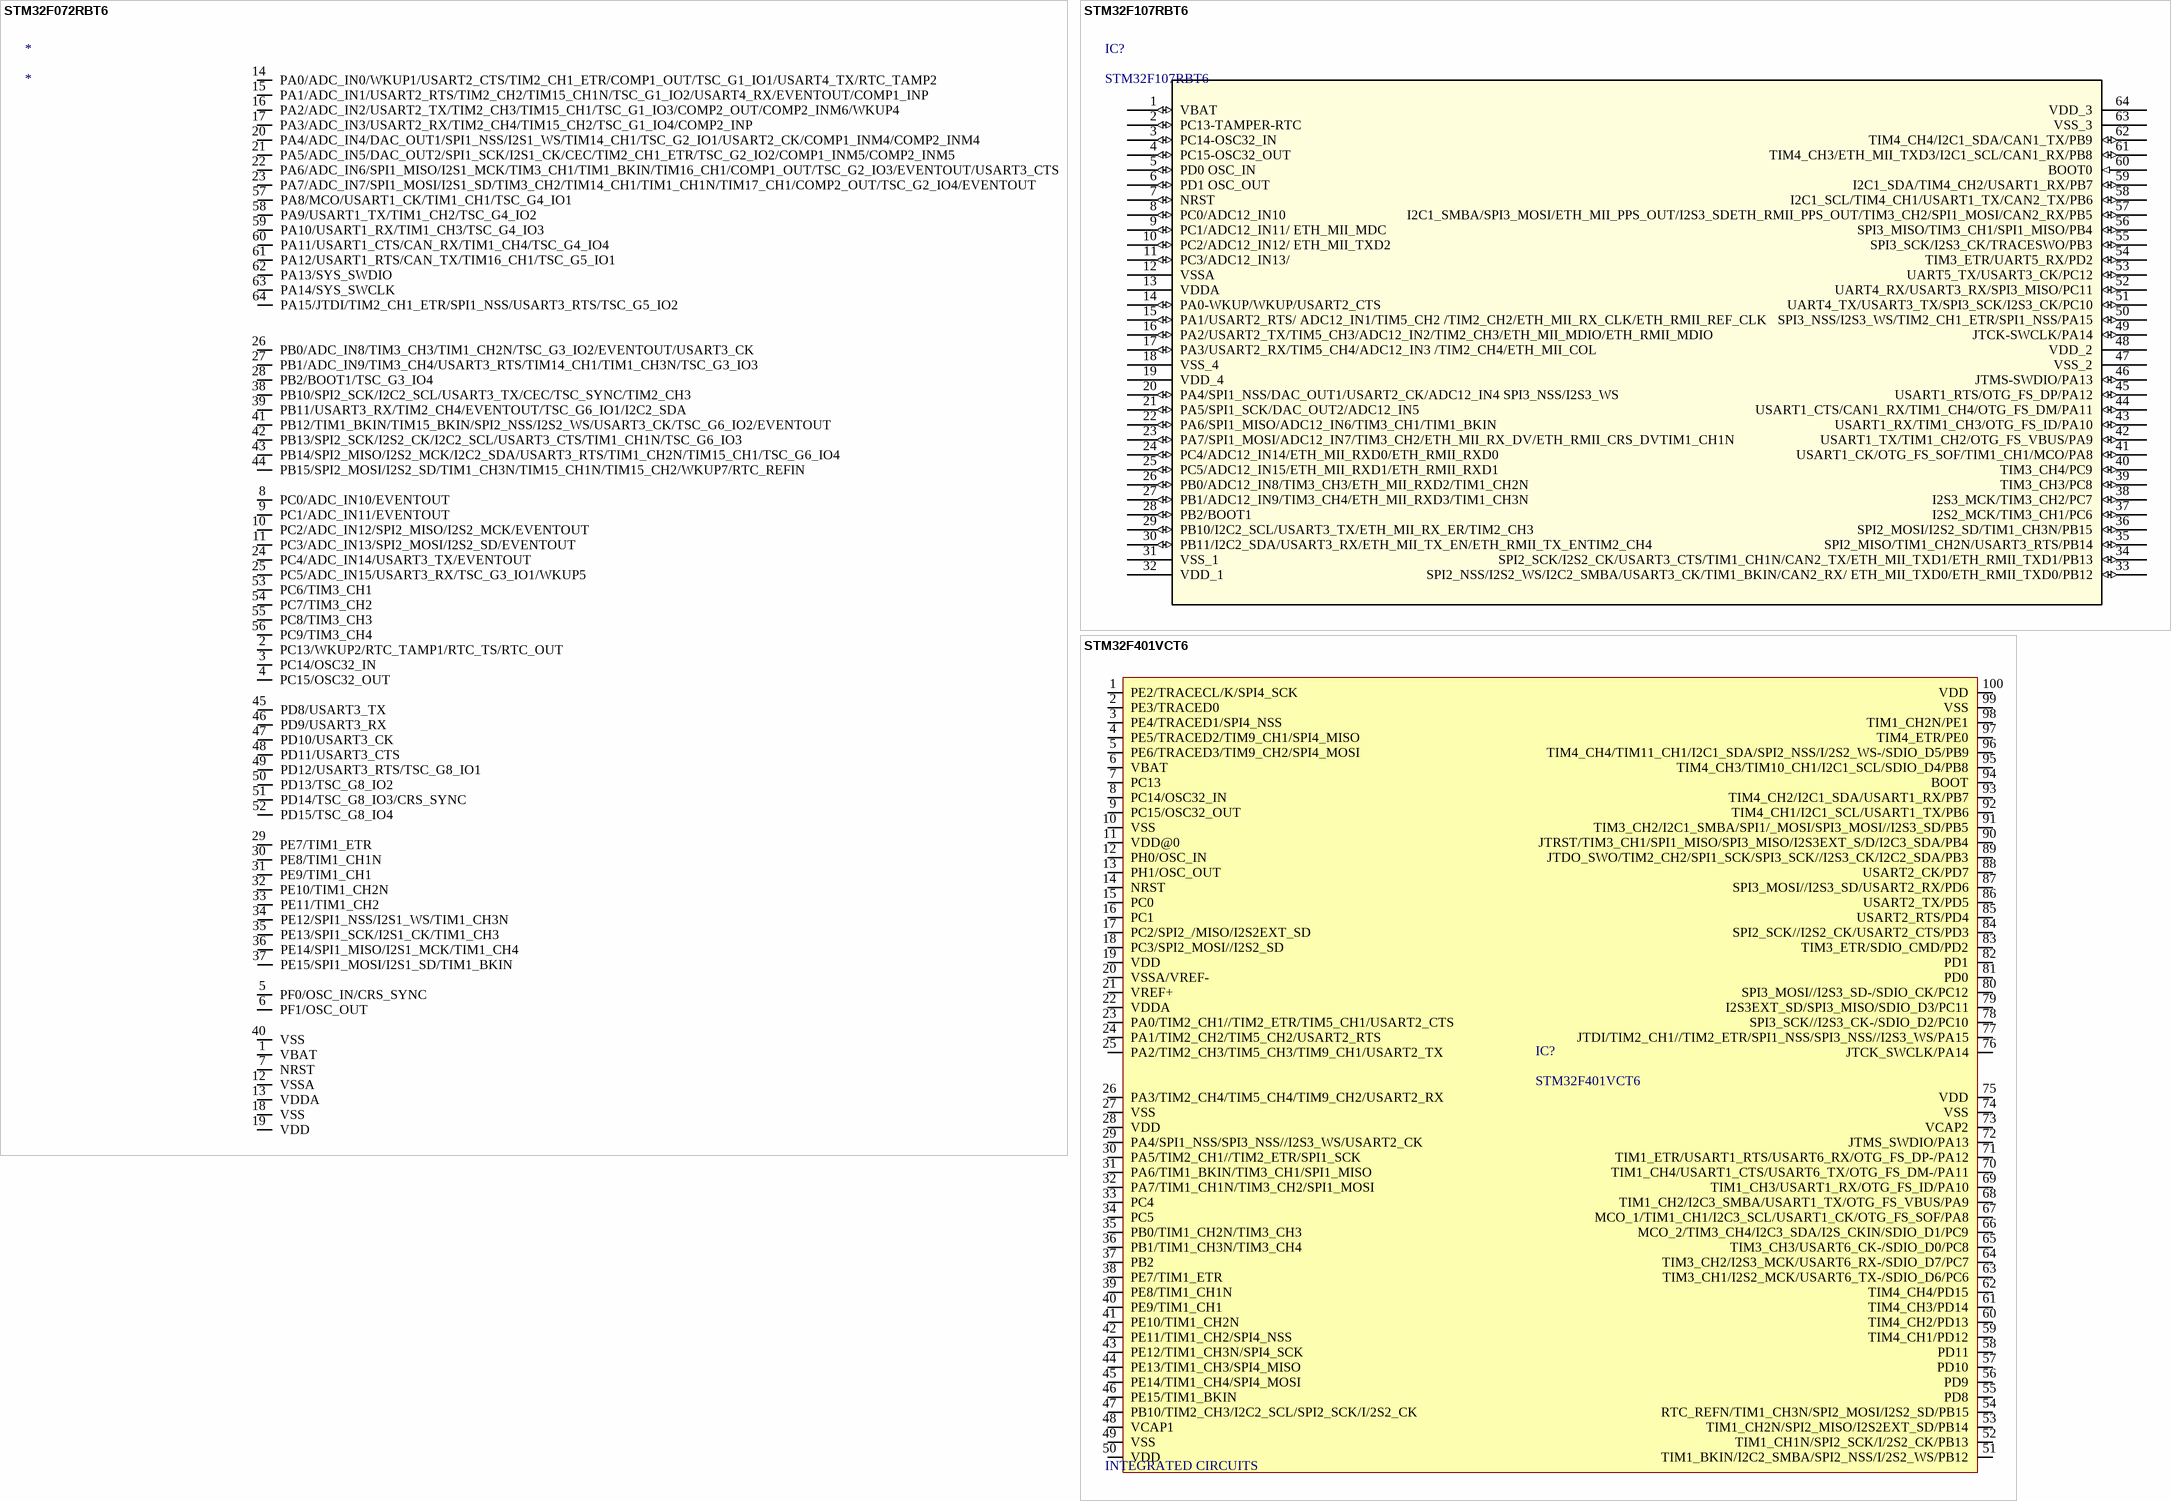
[diagram p9: symbols STM32F072RBT6 to STM32F401VCT6]

## STM32F072RBT6
designator *
MCU 32-Bit GP STM32F 32MHz ARM Cortex M0+ RISC 128KB Flash 64-Pin LQFP Tray; Manufacturer: STMicroelectronics; Manufacturer Part Number: STM32F072RBT6; RoHS: Yes; Category: Microcontrollers; Lead Free: 5697LeadFree
pins: 1 VBAT, 2 PC13/WKUP2/RTC_TAMP1/RTC_TS/RTC_OUT, 3 PC14/OSC32_IN, 4 PC15/OSC32_OUT, 5 PF0/OSC_IN/CRS_SYNC, 6 PF1/OSC_OUT, 7 NRST, 8 PC0/ADC_IN10/EVENTOUT, 9 PC1/ADC_IN11/EVENTOUT, 10 PC2/ADC_IN12/SPI2_MISO/I2S2_MCK/EVENTOUT, 11 PC3/ADC_IN13/SPI2_MOSI/I2S2_SD/EVENTOUT, 12 VSSA, 13 VDDA, 14 PA0/ADC_IN0/WKUP1/USART2_CTS/TIM2_CH1_ETR/COMP1_OUT/TSC_G1_IO1/USART4_TX/RTC_TAMP2, 15 PA1/ADC_IN1/USART2_RTS/TIM2_CH2/TIM15_CH1N/TSC_G1_IO2/USART4_RX/EVENTOUT/COMP1_INP, 16 PA2/ADC_IN2/USART2_TX/TIM2_CH3/TIM15_CH1/TSC_G1_IO3/COMP2_OUT/COMP2_INM6/WKUP4, 17 PA3/ADC_IN3/USART2_RX/TIM2_CH4/TIM15_CH2/TSC_G1_IO4/COMP2_INP, 18 VSS, 19 VDD, 20 PA4/ADC_IN4/DAC_OUT1/SPI1_NSS/I2S1_WS/TIM14_CH1/TSC_G2_IO1/USART2_CK/COMP1_INM4/COMP2_INM4, 21 PA5/ADC_IN5/DAC_OUT2/SPI1_SCK/I2S1_CK/CEC/TIM2_CH1_ETR/TSC_G2_IO2/COMP1_INM5/COMP2_INM5, 22 PA6/ADC_IN6/SPI1_MISO/I2S1_MCK/TIM3_CH1/TIM1_BKIN/TIM16_CH1/COMP1_OUT/TSC_G2_IO3/EVENTOUT/USART3_CTS, 23 PA7/ADC_IN7/SPI1_MOSI/I2S1_SD/TIM3_CH2/TIM14_CH1/TIM1_CH1N/TIM17_CH1/COMP2_OUT/TSC_G2_IO4/EVENTOUT, 24 PC4/ADC_IN14/USART3_TX/EVENTOUT, 25 PC5/ADC_IN15/USART3_RX/TSC_G3_IO1/WKUP5, 26 PB0/ADC_IN8/TIM3_CH3/TIM1_CH2N/TSC_G3_IO2/EVENTOUT/USART3_CK, 27 PB1/ADC_IN9/TIM3_CH4/USART3_RTS/TIM14_CH1/TIM1_CH3N/TSC_G3_IO3, 28 PB2/BOOT1/TSC_G3_IO4, 29 PE7/TIM1_ETR, 30 PE8/TIM1_CH1N, 31 PE9/TIM1_CH1, 32 PE10/TIM1_CH2N, 33 PE11/TIM1_CH2, 34 PE12/SPI1_NSS/I2S1_WS/TIM1_CH3N, 35 PE13/SPI1_SCK/I2S1_CK/TIM1_CH3, 36 PE14/SPI1_MISO/I2S1_MCK/TIM1_CH4, 37 PE15/SPI1_MOSI/I2S1_SD/TIM1_BKIN, 38 PB10/SPI2_SCK/I2C2_SCL/USART3_TX/CEC/TSC_SYNC/TIM2_CH3, 39 PB11/USART3_RX/TIM2_CH4/EVENTOUT/TSC_G6_IO1/I2C2_SDA, 40 VSS, 41 PB12/TIM1_BKIN/TIM15_BKIN/SPI2_NSS/I2S2_WS/USART3_CK/TSC_G6_IO2/EVENTOUT, 42 PB13/SPI2_SCK/I2S2_CK/I2C2_SCL/USART3_CTS/TIM1_CH1N/TSC_G6_IO3, 43 PB14/SPI2_MISO/I2S2_MCK/I2C2_SDA/USART3_RTS/TIM1_CH2N/TIM15_CH1/TSC_G6_IO4, 44 PB15/SPI2_MOSI/I2S2_SD/TIM1_CH3N/TIM15_CH1N/TIM15_CH2/WKUP7/RTC_REFIN, 45 PD8/USART3_TX, 46 PD9/USART3_RX, 47 PD10/USART3_CK, 48 PD11/USART3_CTS, 49 PD12/USART3_RTS/TSC_G8_IO1, 50 PD13/TSC_G8_IO2, 51 PD14/TSC_G8_IO3/CRS_SYNC, 52 PD15/TSC_G8_IO4, 53 PC6/TIM3_CH1, 54 PC7/TIM3_CH2, 55 PC8/TIM3_CH3, 56 PC9/TIM3_CH4, 57 PA8/MCO/USART1_CK/TIM1_CH1/TSC_G4_IO1, 58 PA9/USART1_TX/TIM1_CH2/TSC_G4_IO2, 59 PA10/USART1_RX/TIM1_CH3/TSC_G4_IO3, 60 PA11/USART1_CTS/CAN_RX/TIM1_CH4/TSC_G4_IO4, 61 PA12/USART1_RTS/CAN_TX/TIM16_CH1/TSC_G5_IO1, 62 PA13/SYS_SWDIO, 63 PA14/SYS_SWCLK, 64 PA15/JTDI/TIM2_CH1_ETR/SPI1_NSS/USART3_RTS/TSC_G5_IO2

## STM32F107RBT6
designator IC?
MCU 32-bit STM32 ARM Cortex M3 RISC 128KB Flash 2.5V/3.3V 64-Pin LQFP Tray; Manufacturer: STMicroelectronics; Purpose Of Usage: BASIC; Supplier 1: Digi-Key; Supplier Part Number 1: 497-8916-ND; Manufacturer Part Number: STM32F107RBT6; RoHS: YES; Stock 1: 1920; Case/Package: LQFP; Package Quantity: 160; Lead Free: Lead Free; Category: INTEGRATED CIRCUITS; Sub-Category: MCU; Mount: SMD; Stock ID: ??
footprint LQFP-64
pins: 1 VBAT (io), 2 PC13-TAMPER-RTC (io), 3 PC14-OSC32_IN (io), 4 PC15-OSC32_OUT (io), 5 PD0 OSC_IN (io), 6 PD1 OSC_OUT (io), 7 NRST (io), 8 PC0/ADC12_IN10 (io), 9 PC1/ADC12_IN11/ ETH_MII_MDC (io), 10 PC2/ADC12_IN12/ ETH_MII_TXD2 (io), 11 PC3/ADC12_IN13/ (io), 12 VSSA (power), 13 VDDA (power), 14 PA0-WKUP/WKUP/USART2_CTS (io), 15 PA1/USART2_RTS/ ADC12_IN1/TIM5_CH2 /TIM2_CH2/ETH_MII_RX_CLK/ETH_RMII_REF_CLK (io), 16 PA2/USART2_TX/TIM5_CH3/ADC12_IN2/TIM2_CH3/ETH_MII_MDIO/ETH_RMII_MDIO (io), 17 PA3/USART2_RX/TIM5_CH4/ADC12_IN3 /TIM2_CH4/ETH_MII_COL (io), 18 VSS_4 (power), 19 VDD_4 (power), 20 PA4/SPI1_NSS/DAC_OUT1/USART2_CK/ADC12_IN4 SPI3_NSS/I2S3_WS (io), 21 PA5/SPI1_SCK/DAC_OUT2/ADC12_IN5 (io), 22 PA6/SPI1_MISO/ADC12_IN6/TIM3_CH1/TIM1_BKIN (io), 23 PA7/SPI1_MOSI/ADC12_IN7/TIM3_CH2/ETH_MII_RX_DV/ETH_RMII_CRS_DVTIM1_CH1N (io), 24 PC4/ADC12_IN14/ETH_MII_RXD0/ETH_RMII_RXD0 (io), 25 PC5/ADC12_IN15/ETH_MII_RXD1/ETH_RMII_RXD1 (io), 26 PB0/ADC12_IN8/TIM3_CH3/ETH_MII_RXD2/TIM1_CH2N (io), 27 PB1/ADC12_IN9/TIM3_CH4/ETH_MII_RXD3/TIM1_CH3N (io), 28 PB2/BOOT1 (io), 29 PB10/I2C2_SCL/USART3_TX/ETH_MII_RX_ER/TIM2_CH3 (io), 30 PB11/I2C2_SDA/USART3_RX/ETH_MII_TX_EN/ETH_RMII_TX_ENTIM2_CH4 (io), 31 VSS_1 (power), 32 VDD_1 (power), 33 SPI2_NSS/I2S2_WS/I2C2_SMBA/USART3_CK/TIM1_BKIN/CAN2_RX/ ETH_MII_TXD0/ETH_RMII_TXD0/PB12 (io), 34 SPI2_SCK/I2S2_CK/USART3_CTS/TIM1_CH1N/CAN2_TX/ETH_MII_TXD1/ETH_RMII_TXD1/PB13 (io), 35 SPI2_MISO/TIM1_CH2N/USART3_RTS/PB14 (io), 36 SPI2_MOSI/I2S2_SD/TIM1_CH3N/PB15 (io), 37 I2S2_MCK/TIM3_CH1/PC6 (io), 38 I2S3_MCK/TIM3_CH2/PC7 (io), 39 TIM3_CH3/PC8 (io), 40 TIM3_CH4/PC9 (io), 41 USART1_CK/OTG_FS_SOF/TIM1_CH1/MCO/PA8 (io), 42 USART1_TX/TIM1_CH2/OTG_FS_VBUS/PA9 (io), 43 USART1_RX/TIM1_CH3/OTG_FS_ID/PA10 (io), 44 USART1_CTS/CAN1_RX/TIM1_CH4/OTG_FS_DM/PA11 (io), 45 USART1_RTS/OTG_FS_DP/PA12 (io), 46 JTMS-SWDIO/PA13 (io), 47 VSS_2 (power), 48 VDD_2 (power), 49 JTCK-SWCLK/PA14 (io), 50 SPI3_NSS/I2S3_WS/TIM2_CH1_ETR/SPI1_NSS/PA15 (io), 51 UART4_TX/USART3_TX/SPI3_SCK/I2S3_CK/PC10 (io), 52 UART4_RX/USART3_RX/SPI3_MISO/PC11 (io), 53 UART5_TX/USART3_CK/PC12 (io), 54 TIM3_ETR/UART5_RX/PD2 (io), 55 SPI3_SCK/I2S3_CK/TRACESWO/PB3 (io), 56 SPI3_MISO/TIM3_CH1/SPI1_MISO/PB4 (io), 57 I2C1_SMBA/SPI3_MOSI/ETH_MII_PPS_OUT/I2S3_SDETH_RMII_PPS_OUT/TIM3_CH2/SPI1_MOSI/CAN2_RX/PB5 (io), 58 I2C1_SCL/TIM4_CH1/USART1_TX/CAN2_TX/PB6 (io), 59 I2C1_SDA/TIM4_CH2/USART1_RX/PB7 (io), 60 BOOT0 (in), 61 TIM4_CH3/ETH_MII_TXD3/I2C1_SCL/CAN1_RX/PB8 (io), 62 TIM4_CH4/I2C1_SDA/CAN1_TX/PB9 (io), 63 VSS_3 (power), 64 VDD_3 (power)